# Altium footprint library WR-FPC_0.50mm.PcbLib: 147 footprints (part 9 of 10)
Each footprint in its own frame and in the unit in brackets; x right, y up, seen from the top. Pads: shape width x height; smd on the part's side, far side on the other; paste and mask are expansions set on the pad; w line width, h text height; cw(c..) or ccw(c..) is an arc to the next point about the centre after c.
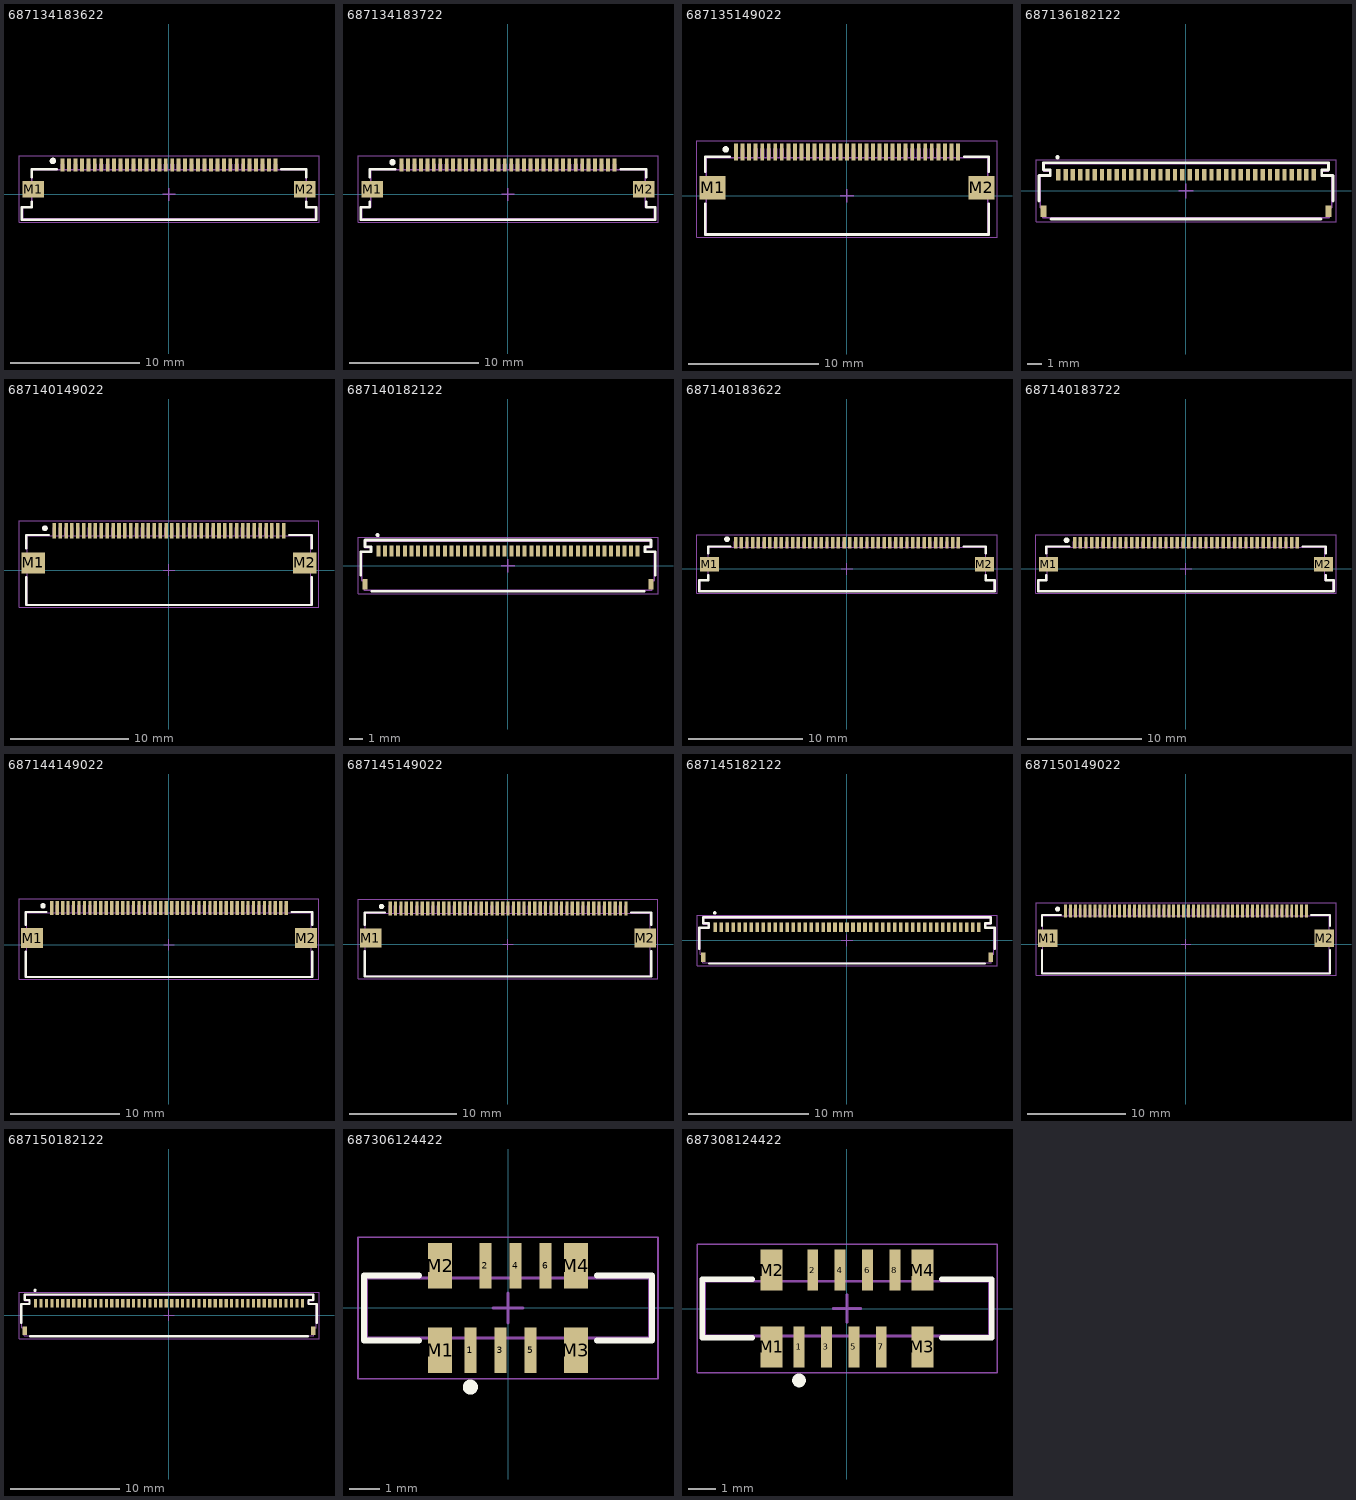
[diagram p8: the footprints below, top view; thin cyan lines are the x and y axes]

## 687134183622 [mm] "ZIF Connectors, Horizontal, Top Contact Low Profile, pitch 0.5mm, 34p"
height 1.3
pads (36):
  rect 0.3x1 smd: 1(-8.25,2.3) 2(-7.75,2.3) 3(-7.25,2.3) 4(-6.75,2.3) 5(-6.25,2.3) 6(-5.75,2.3) 7(-5.25,2.3) 8(-4.75,2.3) 9(-4.25,2.3) 10(-3.75,2.3) 11(-3.25,2.3) 12(-2.75,2.3) 13(-2.25,2.3) 14(-1.75,2.3) 15(-1.25,2.3) 16(-0.75,2.3) 17(-0.25,2.3) 18(0.25,2.3) 19(0.75,2.3) 20(1.25,2.3) 21(1.75,2.3) 22(2.25,2.3) 23(2.75,2.3) 24(3.25,2.3) 25(3.75,2.3) 26(4.25,2.3) 27(4.75,2.3) 28(5.25,2.3) 29(5.75,2.3) 30(6.25,2.3) 31(6.75,2.3) 32(7.25,2.3) 33(7.75,2.3) 34(8.25,2.3)
  rect 1.65x1.3 smd: M1(-10.525,0.4) M2(10.525,0.4)
Top Overlay:
  circle w0.25: c-9,2.6 r0.125
  lines w0.2: -10.65,-0.55 -10.65,-1 -11.425,-1 -11.425,-1.95 11.425,-1.95 11.425,-1 10.65,-1 10.65,-0.55 ; -10.65,1.35 -10.65,1.95 -8.7,1.95 ; 8.7,1.95 10.65,1.95 10.65,1.35
Top Assembly:
  lines w0.1: -8.35,1.9 -8.35,2.35 -8.15,2.35 -8.15,1.9 ; -7.85,1.9 -7.85,2.35 -7.65,2.35 -7.65,1.9 ; -7.35,1.9 -7.35,2.35 -7.15,2.35 -7.15,1.9 ; -6.85,1.9 -6.85,2.35 -6.65,2.35 -6.65,1.9 ; -6.35,1.9 -6.35,2.35 -6.15,2.35 -6.15,1.9 ; -5.85,1.9 -5.85,2.35 -5.65,2.35 -5.65,1.9 ; -5.35,1.9 -5.35,2.35 -5.15,2.35 -5.15,1.9 ; -4.85,1.9 -4.85,2.35 -4.65,2.35 -4.65,1.9 ; -4.35,1.9 -4.35,2.35 -4.15,2.35 -4.15,1.9 ; -3.85,1.9 -3.85,2.35 -3.65,2.35 -3.65,1.9 ; -3.35,1.9 -3.35,2.35 -3.15,2.35 -3.15,1.9 ; -2.85,1.9 -2.85,2.35 -2.65,2.35 -2.65,1.9 ; -2.35,1.9 -2.35,2.35 -2.15,2.35 -2.15,1.9 ; -1.85,1.9 -1.85,2.35 -1.65,2.35 -1.65,1.9 ; -1.35,1.9 -1.35,2.35 -1.15,2.35 -1.15,1.9 ; -0.85,1.9 -0.85,2.35 -0.65,2.35 -0.65,1.9 ; -0.35,1.9 -0.35,2.35 -0.15,2.35 -0.15,1.9 ; 0.15,1.9 0.15,2.35 0.35,2.35 0.35,1.9 ; 0.65,1.9 0.65,2.35 0.85,2.35 0.85,1.9 ; 1.15,1.9 1.15,2.35 1.35,2.35 1.35,1.9 ; 1.65,1.9 1.65,2.35 1.85,2.35 1.85,1.9 ; 2.15,1.9 2.15,2.35 2.35,2.35 2.35,1.9 ; 2.65,1.9 2.65,2.35 2.85,2.35 2.85,1.9 ; 3.15,1.9 3.15,2.35 3.35,2.35 3.35,1.9 ; 3.65,1.9 3.65,2.35 3.85,2.35 3.85,1.9 ; 4.15,1.9 4.15,2.35 4.35,2.35 4.35,1.9 ; 4.65,1.9 4.65,2.35 4.85,2.35 4.85,1.9 ; 5.15,1.9 5.15,2.35 5.35,2.35 5.35,1.9 ; 5.65,1.9 5.65,2.35 5.85,2.35 5.85,1.9 ; 6.15,1.9 6.15,2.35 6.35,2.35 6.35,1.9 ; 6.65,1.9 6.65,2.35 6.85,2.35 6.85,1.9 ; 7.15,1.9 7.15,2.35 7.35,2.35 7.35,1.9 ; 7.65,1.9 7.65,2.35 7.85,2.35 7.85,1.9 ; 8.15,1.9 8.15,2.35 8.35,2.35 8.35,1.9 ; -11.35,-1.9 -11.35,-1 -10.65,-1 -10.65,1.9 10.65,1.9 10.65,-1 11.35,-1 11.35,-1.9 -11.35,-1.9
Top Designator:
  text ".Designator" at -3.647,-0.357 h1
Top 3D Body:
  lines w0.1: -8.35,1.9 -8.35,2.35 -8.15,2.35 -8.15,1.9 ; -7.85,1.9 -7.85,2.35 -7.65,2.35 -7.65,1.9 ; -7.35,1.9 -7.35,2.35 -7.15,2.35 -7.15,1.9 ; -6.85,1.9 -6.85,2.35 -6.65,2.35 -6.65,1.9 ; -6.35,1.9 -6.35,2.35 -6.15,2.35 -6.15,1.9 ; -5.85,1.9 -5.85,2.35 -5.65,2.35 -5.65,1.9 ; -5.35,1.9 -5.35,2.35 -5.15,2.35 -5.15,1.9 ; -4.85,1.9 -4.85,2.35 -4.65,2.35 -4.65,1.9 ; -4.35,1.9 -4.35,2.35 -4.15,2.35 -4.15,1.9 ; -3.85,1.9 -3.85,2.35 -3.65,2.35 -3.65,1.9 ; -3.35,1.9 -3.35,2.35 -3.15,2.35 -3.15,1.9 ; -2.85,1.9 -2.85,2.35 -2.65,2.35 -2.65,1.9 ; -2.35,1.9 -2.35,2.35 -2.15,2.35 -2.15,1.9 ; -1.85,1.9 -1.85,2.35 -1.65,2.35 -1.65,1.9 ; -1.35,1.9 -1.35,2.35 -1.15,2.35 -1.15,1.9 ; -0.85,1.9 -0.85,2.35 -0.65,2.35 -0.65,1.9 ; -0.35,1.9 -0.35,2.35 -0.15,2.35 -0.15,1.9 ; 0.15,1.9 0.15,2.35 0.35,2.35 0.35,1.9 ; 0.65,1.9 0.65,2.35 0.85,2.35 0.85,1.9 ; 1.15,1.9 1.15,2.35 1.35,2.35 1.35,1.9 ; 1.65,1.9 1.65,2.35 1.85,2.35 1.85,1.9 ; 2.15,1.9 2.15,2.35 2.35,2.35 2.35,1.9 ; 2.65,1.9 2.65,2.35 2.85,2.35 2.85,1.9 ; 3.15,1.9 3.15,2.35 3.35,2.35 3.35,1.9 ; 3.65,1.9 3.65,2.35 3.85,2.35 3.85,1.9 ; 4.15,1.9 4.15,2.35 4.35,2.35 4.35,1.9 ; 4.65,1.9 4.65,2.35 4.85,2.35 4.85,1.9 ; 5.15,1.9 5.15,2.35 5.35,2.35 5.35,1.9 ; 5.65,1.9 5.65,2.35 5.85,2.35 5.85,1.9 ; 6.15,1.9 6.15,2.35 6.35,2.35 6.35,1.9 ; 6.65,1.9 6.65,2.35 6.85,2.35 6.85,1.9 ; 7.15,1.9 7.15,2.35 7.35,2.35 7.35,1.9 ; 7.65,1.9 7.65,2.35 7.85,2.35 7.85,1.9 ; 8.15,1.9 8.15,2.35 8.35,2.35 8.35,1.9 ; -11.35,-1.9 11.35,-1.9 11.35,-1 10.65,-1 10.65,1.9 -10.65,1.9 -10.65,-1 -11.35,-1 -11.35,-1.9
Top Courtyard:
  lines w0.05: -11.625,-2.15 -11.625,3 11.625,3 11.625,-2.15 -11.625,-2.15
Top Component Center:
  lines w0.1: -0.5,0 0.5,0 ; 0,-0.5 0,0.5
3D body "687134183622.stp": height 1.28, standoff -0.01, extent -11.35,-1.9 11.35,2.35

## 687134183722 [mm] "ZIF Connectors, Horizontal, Bottom Contact Low Profile, pitch 0.5mm, 34p"
height 1.3
pads (36):
  rect 0.3x1 smd: 1(-8.25,2.3) 2(-7.75,2.3) 3(-7.25,2.3) 4(-6.75,2.3) 5(-6.25,2.3) 6(-5.75,2.3) 7(-5.25,2.3) 8(-4.75,2.3) 9(-4.25,2.3) 10(-3.75,2.3) 11(-3.25,2.3) 12(-2.75,2.3) 13(-2.25,2.3) 14(-1.75,2.3) 15(-1.25,2.3) 16(-0.75,2.3) 17(-0.25,2.3) 18(0.25,2.3) 19(0.75,2.3) 20(1.25,2.3) 21(1.75,2.3) 22(2.25,2.3) 23(2.75,2.3) 24(3.25,2.3) 25(3.75,2.3) 26(4.25,2.3) 27(4.75,2.3) 28(5.25,2.3) 29(5.75,2.3) 30(6.25,2.3) 31(6.75,2.3) 32(7.25,2.3) 33(7.75,2.3) 34(8.25,2.3)
  rect 1.65x1.3 smd: M1(-10.525,0.4) M2(10.525,0.4)
Top Overlay:
  circle w0.25: c-8.95,2.5 r0.125
  lines w0.2: -10.725,-0.55 -10.725,-1 -11.425,-1 -11.425,-1.95 11.425,-1.95 11.425,-1 10.725,-1 10.725,-0.55 ; -10.725,1.35 -10.725,1.95 -8.725,1.95 ; 8.725,1.95 10.725,1.95 10.725,1.35
Top Assembly:
  lines w0.1: -8.35,1.9 -8.35,2.35 -8.15,2.35 -8.15,1.9 ; -7.85,1.9 -7.85,2.35 -7.65,2.35 -7.65,1.9 ; -7.35,1.9 -7.35,2.35 -7.15,2.35 -7.15,1.9 ; -6.85,1.9 -6.85,2.35 -6.65,2.35 -6.65,1.9 ; -6.35,1.9 -6.35,2.35 -6.15,2.35 -6.15,1.9 ; -5.85,1.9 -5.85,2.35 -5.65,2.35 -5.65,1.9 ; -5.35,1.9 -5.35,2.35 -5.15,2.35 -5.15,1.9 ; -4.85,1.9 -4.85,2.35 -4.65,2.35 -4.65,1.9 ; -4.35,1.9 -4.35,2.35 -4.15,2.35 -4.15,1.9 ; -3.85,1.9 -3.85,2.35 -3.65,2.35 -3.65,1.9 ; -3.35,1.9 -3.35,2.35 -3.15,2.35 -3.15,1.9 ; -2.85,1.9 -2.85,2.35 -2.65,2.35 -2.65,1.9 ; -2.35,1.9 -2.35,2.35 -2.15,2.35 -2.15,1.9 ; -1.85,1.9 -1.85,2.35 -1.65,2.35 -1.65,1.9 ; -1.35,1.9 -1.35,2.35 -1.15,2.35 -1.15,1.9 ; -0.85,1.9 -0.85,2.35 -0.65,2.35 -0.65,1.9 ; -0.35,1.9 -0.35,2.35 -0.15,2.35 -0.15,1.9 ; 0.15,1.9 0.15,2.35 0.35,2.35 0.35,1.9 ; 0.65,1.9 0.65,2.35 0.85,2.35 0.85,1.9 ; 1.15,1.9 1.15,2.35 1.35,2.35 1.35,1.9 ; 1.65,1.9 1.65,2.35 1.85,2.35 1.85,1.9 ; 2.15,1.9 2.15,2.35 2.35,2.35 2.35,1.9 ; 2.65,1.9 2.65,2.35 2.85,2.35 2.85,1.9 ; 3.15,1.9 3.15,2.35 3.35,2.35 3.35,1.9 ; 3.65,1.9 3.65,2.35 3.85,2.35 3.85,1.9 ; 4.15,1.9 4.15,2.35 4.35,2.35 4.35,1.9 ; 4.65,1.9 4.65,2.35 4.85,2.35 4.85,1.9 ; 5.15,1.9 5.15,2.35 5.35,2.35 5.35,1.9 ; 5.65,1.9 5.65,2.35 5.85,2.35 5.85,1.9 ; 6.15,1.9 6.15,2.35 6.35,2.35 6.35,1.9 ; 6.65,1.9 6.65,2.35 6.85,2.35 6.85,1.9 ; 7.15,1.9 7.15,2.35 7.35,2.35 7.35,1.9 ; 7.65,1.9 7.65,2.35 7.85,2.35 7.85,1.9 ; 8.15,1.9 8.15,2.35 8.35,2.35 8.35,1.9 ; -11.35,-1.9 11.35,-1.9 11.35,-1 10.65,-1 10.65,1.9 -10.65,1.9 -10.65,-1 -11.35,-1 -11.35,-1.9
Top Designator:
  text ".Designator" at -3.647,-0.357 h1
Top 3D Body:
  lines w0.1: -8.35,1.9 -8.35,2.35 -8.15,2.35 -8.15,1.9 ; -7.85,1.9 -7.85,2.35 -7.65,2.35 -7.65,1.9 ; -7.35,1.9 -7.35,2.35 -7.15,2.35 -7.15,1.9 ; -6.85,1.9 -6.85,2.35 -6.65,2.35 -6.65,1.9 ; -6.35,1.9 -6.35,2.35 -6.15,2.35 -6.15,1.9 ; -5.85,1.9 -5.85,2.35 -5.65,2.35 -5.65,1.9 ; -5.35,1.9 -5.35,2.35 -5.15,2.35 -5.15,1.9 ; -4.85,1.9 -4.85,2.35 -4.65,2.35 -4.65,1.9 ; -4.35,1.9 -4.35,2.35 -4.15,2.35 -4.15,1.9 ; -3.85,1.9 -3.85,2.35 -3.65,2.35 -3.65,1.9 ; -3.35,1.9 -3.35,2.35 -3.15,2.35 -3.15,1.9 ; -2.85,1.9 -2.85,2.35 -2.65,2.35 -2.65,1.9 ; -2.35,1.9 -2.35,2.35 -2.15,2.35 -2.15,1.9 ; -1.85,1.9 -1.85,2.35 -1.65,2.35 -1.65,1.9 ; -1.35,1.9 -1.35,2.35 -1.15,2.35 -1.15,1.9 ; -0.85,1.9 -0.85,2.35 -0.65,2.35 -0.65,1.9 ; -0.35,1.9 -0.35,2.35 -0.15,2.35 -0.15,1.9 ; 0.15,1.9 0.15,2.35 0.35,2.35 0.35,1.9 ; 0.65,1.9 0.65,2.35 0.85,2.35 0.85,1.9 ; 1.15,1.9 1.15,2.35 1.35,2.35 1.35,1.9 ; 1.65,1.9 1.65,2.35 1.85,2.35 1.85,1.9 ; 2.15,1.9 2.15,2.35 2.35,2.35 2.35,1.9 ; 2.65,1.9 2.65,2.35 2.85,2.35 2.85,1.9 ; 3.15,1.9 3.15,2.35 3.35,2.35 3.35,1.9 ; 3.65,1.9 3.65,2.35 3.85,2.35 3.85,1.9 ; 4.15,1.9 4.15,2.35 4.35,2.35 4.35,1.9 ; 4.65,1.9 4.65,2.35 4.85,2.35 4.85,1.9 ; 5.15,1.9 5.15,2.35 5.35,2.35 5.35,1.9 ; 5.65,1.9 5.65,2.35 5.85,2.35 5.85,1.9 ; 6.15,1.9 6.15,2.35 6.35,2.35 6.35,1.9 ; 6.65,1.9 6.65,2.35 6.85,2.35 6.85,1.9 ; 7.15,1.9 7.15,2.35 7.35,2.35 7.35,1.9 ; 7.65,1.9 7.65,2.35 7.85,2.35 7.85,1.9 ; 8.15,1.9 8.15,2.35 8.35,2.35 8.35,1.9 ; -11.35,-1.9 -11.35,-1 -10.65,-1 -10.65,1.9 10.65,1.9 10.65,-1 11.35,-1 11.35,-1.9 -11.35,-1.9
Top Courtyard:
  lines w0.05: -11.625,-2.15 11.625,-2.15 11.625,3 -11.625,3 -11.625,-2.15
Top Component Center:
  lines w0.1: -0.5,0 0.5,0 ; 0,-0.5 0,0.5
3D body "687134183722.stp": height 1.28, standoff -0.01, extent -11.35,-1.9 11.35,2.35

## 687135149022 [mm] "0.50mm SMT ZIF Horizontal Hinge Type Bottom Contact, 35p"
height 2.3
pads (37):
  rect 0.3x1.3 smd: 1(-8.5,3.35) 2(-8,3.35) 3(-7.5,3.35) 4(-7,3.35) 5(-6.5,3.35) 6(-6,3.35) 7(-5.5,3.35) 8(-5,3.35) 9(-4.5,3.35) 10(-4,3.35) 11(-3.5,3.35) 12(-3,3.35) 13(-2.5,3.35) 14(-2,3.35) 15(-1.5,3.35) 16(-1,3.35) 17(-0.5,3.35) 18(0,3.35) 19(0.5,3.35) 20(1,3.35) 21(1.5,3.35) 22(2,3.35) 23(2.5,3.35) 24(3,3.35) 25(3.5,3.35) 26(4,3.35) 27(4.5,3.35) 28(5,3.35) 29(5.5,3.35) 30(6,3.35) 31(6.5,3.35) 32(7,3.35) 33(7.5,3.35) 34(8,3.35) 35(8.5,3.35)
  rect 2x1.8 smd: M1(-10.3,0.6) M2(10.3,0.6)
Top Overlay:
  circle w0.25: c-9.3,3.55 r0.125
  lines w0.2: -10.875,-0.625 -10.875,-2.975 10.875,-2.975 10.875,-0.625 ; -10.875,1.825 -10.875,2.975 -8.975,2.975 ; 8.975,2.975 10.875,2.975 10.875,1.825
Top Assembly:
  lines w0.1: -8.6,2.9 -8.6,3.6 -8.4,3.6 -8.4,2.9 ; -8.1,2.9 -8.1,3.6 -7.9,3.6 -7.9,2.9 ; -7.6,2.9 -7.6,3.6 -7.4,3.6 -7.4,2.9 ; -7.1,2.9 -7.1,3.6 -6.9,3.6 -6.9,2.9 ; -6.6,2.9 -6.6,3.6 -6.4,3.6 -6.4,2.9 ; -6.1,2.9 -6.1,3.6 -5.9,3.6 -5.9,2.9 ; -5.6,2.9 -5.6,3.6 -5.4,3.6 -5.4,2.9 ; -5.1,2.9 -5.1,3.6 -4.9,3.6 -4.9,2.9 ; -4.6,2.9 -4.6,3.6 -4.4,3.6 -4.4,2.9 ; -4.1,2.9 -4.1,3.6 -3.9,3.6 -3.9,2.9 ; -3.6,2.9 -3.6,3.6 -3.4,3.6 -3.4,2.9 ; -3.1,2.9 -3.1,3.6 -2.9,3.6 -2.9,2.9 ; -2.6,2.9 -2.6,3.6 -2.4,3.6 -2.4,2.9 ; -2.1,2.9 -2.1,3.6 -1.9,3.6 -1.9,2.9 ; -1.6,2.9 -1.6,3.6 -1.4,3.6 -1.4,2.9 ; -1.1,2.9 -1.1,3.6 -0.9,3.6 -0.9,2.9 ; -0.6,2.9 -0.6,3.6 -0.4,3.6 -0.4,2.9 ; -0.1,2.9 -0.1,3.6 0.1,3.6 0.1,2.9 ; 0.4,2.9 0.4,3.6 0.6,3.6 0.6,2.9 ; 0.9,2.9 0.9,3.6 1.1,3.6 1.1,2.9 ; 1.4,2.9 1.4,3.6 1.6,3.6 1.6,2.9 ; 1.9,2.9 1.9,3.6 2.1,3.6 2.1,2.9 ; 2.4,2.9 2.4,3.6 2.6,3.6 2.6,2.9 ; 2.9,2.9 2.9,3.6 3.1,3.6 3.1,2.9 ; 3.4,2.9 3.4,3.6 3.6,3.6 3.6,2.9 ; 3.9,2.9 3.9,3.6 4.1,3.6 4.1,2.9 ; 4.4,2.9 4.4,3.6 4.6,3.6 4.6,2.9 ; 4.9,2.9 4.9,3.6 5.1,3.6 5.1,2.9 ; 5.4,2.9 5.4,3.6 5.6,3.6 5.6,2.9 ; 5.9,2.9 5.9,3.6 6.1,3.6 6.1,2.9 ; 6.4,2.9 6.4,3.6 6.6,3.6 6.6,2.9 ; 6.9,2.9 6.9,3.6 7.1,3.6 7.1,2.9 ; 7.4,2.9 7.4,3.6 7.6,3.6 7.6,2.9 ; 7.9,2.9 7.9,3.6 8.1,3.6 8.1,2.9 ; 8.4,2.9 8.4,3.6 8.6,3.6 8.6,2.9 ; -10.8,-2.9 -10.8,2.9 10.8,2.9 10.8,-2.9 -10.8,-2.9
Top Designator:
  text ".Designator" at -3.647,-0.357 h1
Top 3D Body:
  lines w0.1: -8.6,2.9 -8.6,3.6 -8.4,3.6 -8.4,2.9 ; -8.1,2.9 -8.1,3.6 -7.9,3.6 -7.9,2.9 ; -7.6,2.9 -7.6,3.6 -7.4,3.6 -7.4,2.9 ; -7.1,2.9 -7.1,3.6 -6.9,3.6 -6.9,2.9 ; -6.6,2.9 -6.6,3.6 -6.4,3.6 -6.4,2.9 ; -6.1,2.9 -6.1,3.6 -5.9,3.6 -5.9,2.9 ; -5.6,2.9 -5.6,3.6 -5.4,3.6 -5.4,2.9 ; -5.1,2.9 -5.1,3.6 -4.9,3.6 -4.9,2.9 ; -4.6,2.9 -4.6,3.6 -4.4,3.6 -4.4,2.9 ; -4.1,2.9 -4.1,3.6 -3.9,3.6 -3.9,2.9 ; -3.6,2.9 -3.6,3.6 -3.4,3.6 -3.4,2.9 ; -3.1,2.9 -3.1,3.6 -2.9,3.6 -2.9,2.9 ; -2.6,2.9 -2.6,3.6 -2.4,3.6 -2.4,2.9 ; -2.1,2.9 -2.1,3.6 -1.9,3.6 -1.9,2.9 ; -1.6,2.9 -1.6,3.6 -1.4,3.6 -1.4,2.9 ; -1.1,2.9 -1.1,3.6 -0.9,3.6 -0.9,2.9 ; -0.6,2.9 -0.6,3.6 -0.4,3.6 -0.4,2.9 ; -0.1,2.9 -0.1,3.6 0.1,3.6 0.1,2.9 ; 0.4,2.9 0.4,3.6 0.6,3.6 0.6,2.9 ; 0.9,2.9 0.9,3.6 1.1,3.6 1.1,2.9 ; 1.4,2.9 1.4,3.6 1.6,3.6 1.6,2.9 ; 1.9,2.9 1.9,3.6 2.1,3.6 2.1,2.9 ; 2.4,2.9 2.4,3.6 2.6,3.6 2.6,2.9 ; 2.9,2.9 2.9,3.6 3.1,3.6 3.1,2.9 ; 3.4,2.9 3.4,3.6 3.6,3.6 3.6,2.9 ; 3.9,2.9 3.9,3.6 4.1,3.6 4.1,2.9 ; 4.4,2.9 4.4,3.6 4.6,3.6 4.6,2.9 ; 4.9,2.9 4.9,3.6 5.1,3.6 5.1,2.9 ; 5.4,2.9 5.4,3.6 5.6,3.6 5.6,2.9 ; 5.9,2.9 5.9,3.6 6.1,3.6 6.1,2.9 ; 6.4,2.9 6.4,3.6 6.6,3.6 6.6,2.9 ; 6.9,2.9 6.9,3.6 7.1,3.6 7.1,2.9 ; 7.4,2.9 7.4,3.6 7.6,3.6 7.6,2.9 ; 7.9,2.9 7.9,3.6 8.1,3.6 8.1,2.9 ; 8.4,2.9 8.4,3.6 8.6,3.6 8.6,2.9 ; -10.8,-2.9 10.8,-2.9 10.8,2.9 -10.8,2.9 -10.8,-2.9
Top Courtyard:
  lines w0.05: -11.5,-3.175 -11.5,4.2 11.5,4.2 11.5,-3.175 -11.5,-3.175
Top Component Center:
  lines w0.1: -0.5,0 0.5,0 ; 0,-0.5 0,0.5
3D body "687135149022.stp": height 2.25, standoff 0, extent -10.8,-2.9 10.8,3.6

## 687136182122 [mm] "ZIF Connectors, Horizontal, Dual Contact Back Locking, pitch 0.5mm, 36p"
height 1.06
pads (38):
  rect 0.3x0.8 smd: 1(-8.75,1.1) 2(-8.25,1.1) 3(-7.75,1.1) 4(-7.25,1.1) 5(-6.75,1.1) 6(-6.25,1.1) 7(-5.75,1.1) 8(-5.25,1.1) 9(-4.75,1.1) 10(-4.25,1.1) 11(-3.75,1.1) 12(-3.25,1.1) 13(-2.75,1.1) 14(-2.25,1.1) 15(-1.75,1.1) 16(-1.25,1.1) 17(-0.75,1.1) 18(-0.25,1.1) 19(0.25,1.1) 20(0.75,1.1) 21(1.25,1.1) 22(1.75,1.1) 23(2.25,1.1) 24(2.75,1.1) 25(3.25,1.1) 26(3.75,1.1) 27(4.25,1.1) 28(4.75,1.1) 29(5.25,1.1) 30(5.75,1.1) 31(6.25,1.1) 32(6.75,1.1) 33(7.25,1.1) 34(7.75,1.1) 35(8.25,1.1) 36(8.75,1.1)
  rect 0.4x0.8 smd: M1(-9.75,-1.4) M2(9.75,-1.4)
Top Overlay:
  circle w0.15: c-8.8,2.3 r0.075
  lines w0.2: -10.075,-0.7 -10.075,1.05 -9.3,1.05 -9.3,1.425 -9.75,1.425 -9.75,1.925 9.75,1.925 9.75,1.425 9.3,1.425 9.3,1.05 10.075,1.05 10.075,-0.7 ; -9.25,-1.925 9.25,-1.925
Top Assembly:
  lines w0.1: -10,-1.15 -10,1.05 -9.3,1.05 -9.3,1.35 -9.75,1.35 -9.75,1.85 9.75,1.85 9.75,1.35 9.3,1.35 9.3,1.05 10,1.05 10,-1.15 9.8,-1.15 9.8,-1.85 -9.8,-1.85 -9.8,-1.15 -10,-1.15
Top Designator:
  text ".Designator" at -3.647,-0.357 h1
Top 3D Body:
  lines w0.1: -10,-1.15 -9.8,-1.15 -9.8,-1.85 9.8,-1.85 9.8,-1.15 10,-1.15 10,1.05 9.3,1.05 9.3,1.35 9.75,1.35 9.75,1.85 -9.75,1.85 -9.75,1.35 -9.3,1.35 -9.3,1.05 -10,1.05 -10,-1.15
Top Courtyard:
  lines w0.05: -10.275,-2.125 -10.275,2.125 10.275,2.125 10.275,-2.125 -10.275,-2.125
Top Component Center:
  lines w0.1: -0.5,0 0.5,0 ; 0,-0.5 0,0.5
3D body "687136182122.stp": height 0.98, standoff -0.01, extent -10,-1.85 10,1.85

## 687140149022 [mm] "0.50mm SMT ZIF Horizontal Hinge Type Bottom Contact, 40p"
height 2.3
pads (42):
  rect 0.3x1.3 smd: 1(-9.75,3.35) 2(-9.25,3.35) 3(-8.75,3.35) 4(-8.25,3.35) 5(-7.75,3.35) 6(-7.25,3.35) 7(-6.75,3.35) 8(-6.25,3.35) 9(-5.75,3.35) 10(-5.25,3.35) 11(-4.75,3.35) 12(-4.25,3.35) 13(-3.75,3.35) 14(-3.25,3.35) 15(-2.75,3.35) 16(-2.25,3.35) 17(-1.75,3.35) 18(-1.25,3.35) 19(-0.75,3.35) 20(-0.25,3.35) 21(0.25,3.35) 22(0.75,3.35) 23(1.25,3.35) 24(1.75,3.35) 25(2.25,3.35) 26(2.75,3.35) 27(3.25,3.35) 28(3.75,3.35) 29(4.25,3.35) 30(4.75,3.35) 31(5.25,3.35) 32(5.75,3.35) 33(6.25,3.35) 34(6.75,3.35) 35(7.25,3.35) 36(7.75,3.35) 37(8.25,3.35) 38(8.75,3.35) 39(9.25,3.35) 40(9.75,3.35)
  rect 2x1.8 smd: M1(-11.55,0.6) M2(11.55,0.6)
Top Overlay:
  circle w0.25: c-10.55,3.55 r0.125
  lines w0.2: -12.125,-0.625 -12.125,-2.975 12.125,-2.975 12.125,-0.625 ; -12.125,1.825 -12.125,2.975 -10.225,2.975 ; 10.225,2.975 12.125,2.975 12.125,1.825
Top Assembly:
  lines w0.1: -9.85,2.9 -9.85,3.6 -9.65,3.6 -9.65,2.9 ; -9.35,2.9 -9.35,3.6 -9.15,3.6 -9.15,2.9 ; -8.85,2.9 -8.85,3.6 -8.65,3.6 -8.65,2.9 ; -8.35,2.9 -8.35,3.6 -8.15,3.6 -8.15,2.9 ; -7.85,2.9 -7.85,3.6 -7.65,3.6 -7.65,2.9 ; -7.35,2.9 -7.35,3.6 -7.15,3.6 -7.15,2.9 ; -6.85,2.9 -6.85,3.6 -6.65,3.6 -6.65,2.9 ; -6.35,2.9 -6.35,3.6 -6.15,3.6 -6.15,2.9 ; -5.85,2.9 -5.85,3.6 -5.65,3.6 -5.65,2.9 ; -5.35,2.9 -5.35,3.6 -5.15,3.6 -5.15,2.9 ; -4.85,2.9 -4.85,3.6 -4.65,3.6 -4.65,2.9 ; -4.35,2.9 -4.35,3.6 -4.15,3.6 -4.15,2.9 ; -3.85,2.9 -3.85,3.6 -3.65,3.6 -3.65,2.9 ; -3.35,2.9 -3.35,3.6 -3.15,3.6 -3.15,2.9 ; -2.85,2.9 -2.85,3.6 -2.65,3.6 -2.65,2.9 ; -2.35,2.9 -2.35,3.6 -2.15,3.6 -2.15,2.9 ; -1.85,2.9 -1.85,3.6 -1.65,3.6 -1.65,2.9 ; -1.35,2.9 -1.35,3.6 -1.15,3.6 -1.15,2.9 ; -0.85,2.9 -0.85,3.6 -0.65,3.6 -0.65,2.9 ; -0.35,2.9 -0.35,3.6 -0.15,3.6 -0.15,2.9 ; 0.15,2.9 0.15,3.6 0.35,3.6 0.35,2.9 ; 0.65,2.9 0.65,3.6 0.85,3.6 0.85,2.9 ; 1.15,2.9 1.15,3.6 1.35,3.6 1.35,2.9 ; 1.65,2.9 1.65,3.6 1.85,3.6 1.85,2.9 ; 2.15,2.9 2.15,3.6 2.35,3.6 2.35,2.9 ; 2.65,2.9 2.65,3.6 2.85,3.6 2.85,2.9 ; 3.15,2.9 3.15,3.6 3.35,3.6 3.35,2.9 ; 3.65,2.9 3.65,3.6 3.85,3.6 3.85,2.9 ; 4.15,2.9 4.15,3.6 4.35,3.6 4.35,2.9 ; 4.65,2.9 4.65,3.6 4.85,3.6 4.85,2.9 ; 5.15,2.9 5.15,3.6 5.35,3.6 5.35,2.9 ; 5.65,2.9 5.65,3.6 5.85,3.6 5.85,2.9 ; 6.15,2.9 6.15,3.6 6.35,3.6 6.35,2.9 ; 6.65,2.9 6.65,3.6 6.85,3.6 6.85,2.9 ; 7.15,2.9 7.15,3.6 7.35,3.6 7.35,2.9 ; 7.65,2.9 7.65,3.6 7.85,3.6 7.85,2.9 ; 8.15,2.9 8.15,3.6 8.35,3.6 8.35,2.9 ; 8.65,2.9 8.65,3.6 8.85,3.6 8.85,2.9 ; 9.15,2.9 9.15,3.6 9.35,3.6 9.35,2.9 ; 9.65,2.9 9.65,3.6 9.85,3.6 9.85,2.9 ; -12.05,-2.9 12.05,-2.9 12.05,2.9 -12.05,2.9 -12.05,-2.9
Top Designator:
  text ".Designator" at -3.647,-0.357 h1
Top 3D Body:
  lines w0.1: -9.85,2.9 -9.85,3.6 -9.65,3.6 -9.65,2.9 ; -9.35,2.9 -9.35,3.6 -9.15,3.6 -9.15,2.9 ; -8.85,2.9 -8.85,3.6 -8.65,3.6 -8.65,2.9 ; -8.35,2.9 -8.35,3.6 -8.15,3.6 -8.15,2.9 ; -7.85,2.9 -7.85,3.6 -7.65,3.6 -7.65,2.9 ; -7.35,2.9 -7.35,3.6 -7.15,3.6 -7.15,2.9 ; -6.85,2.9 -6.85,3.6 -6.65,3.6 -6.65,2.9 ; -6.35,2.9 -6.35,3.6 -6.15,3.6 -6.15,2.9 ; -5.85,2.9 -5.85,3.6 -5.65,3.6 -5.65,2.9 ; -5.35,2.9 -5.35,3.6 -5.15,3.6 -5.15,2.9 ; -4.85,2.9 -4.85,3.6 -4.65,3.6 -4.65,2.9 ; -4.35,2.9 -4.35,3.6 -4.15,3.6 -4.15,2.9 ; -3.85,2.9 -3.85,3.6 -3.65,3.6 -3.65,2.9 ; -3.35,2.9 -3.35,3.6 -3.15,3.6 -3.15,2.9 ; -2.85,2.9 -2.85,3.6 -2.65,3.6 -2.65,2.9 ; -2.35,2.9 -2.35,3.6 -2.15,3.6 -2.15,2.9 ; -1.85,2.9 -1.85,3.6 -1.65,3.6 -1.65,2.9 ; -1.35,2.9 -1.35,3.6 -1.15,3.6 -1.15,2.9 ; -0.85,2.9 -0.85,3.6 -0.65,3.6 -0.65,2.9 ; -0.35,2.9 -0.35,3.6 -0.15,3.6 -0.15,2.9 ; 0.15,2.9 0.15,3.6 0.35,3.6 0.35,2.9 ; 0.65,2.9 0.65,3.6 0.85,3.6 0.85,2.9 ; 1.15,2.9 1.15,3.6 1.35,3.6 1.35,2.9 ; 1.65,2.9 1.65,3.6 1.85,3.6 1.85,2.9 ; 2.15,2.9 2.15,3.6 2.35,3.6 2.35,2.9 ; 2.65,2.9 2.65,3.6 2.85,3.6 2.85,2.9 ; 3.15,2.9 3.15,3.6 3.35,3.6 3.35,2.9 ; 3.65,2.9 3.65,3.6 3.85,3.6 3.85,2.9 ; 4.15,2.9 4.15,3.6 4.35,3.6 4.35,2.9 ; 4.65,2.9 4.65,3.6 4.85,3.6 4.85,2.9 ; 5.15,2.9 5.15,3.6 5.35,3.6 5.35,2.9 ; 5.65,2.9 5.65,3.6 5.85,3.6 5.85,2.9 ; 6.15,2.9 6.15,3.6 6.35,3.6 6.35,2.9 ; 6.65,2.9 6.65,3.6 6.85,3.6 6.85,2.9 ; 7.15,2.9 7.15,3.6 7.35,3.6 7.35,2.9 ; 7.65,2.9 7.65,3.6 7.85,3.6 7.85,2.9 ; 8.15,2.9 8.15,3.6 8.35,3.6 8.35,2.9 ; 8.65,2.9 8.65,3.6 8.85,3.6 8.85,2.9 ; 9.15,2.9 9.15,3.6 9.35,3.6 9.35,2.9 ; 9.65,2.9 9.65,3.6 9.85,3.6 9.85,2.9 ; -12.05,-2.9 -12.05,2.9 12.05,2.9 12.05,-2.9 -12.05,-2.9
Top Courtyard:
  lines w0.05: -12.75,-3.175 12.75,-3.175 12.75,4.2 -12.75,4.2 -12.75,-3.175
Top Component Center:
  lines w0.1: -0.5,0 0.5,0 ; 0,-0.5 0,0.5
3D body "687140149022.stp": height 2.25, standoff 0, extent -12.05,-2.9 12.05,3.6

## 687140182122 [mm] "ZIF Connectors, Horizontal, Dual Contact Back Locking, pitch 0.5mm, 40p"
height 1.06
pads (42):
  rect 0.3x0.8 smd: 1(-9.75,1.1) 2(-9.25,1.1) 3(-8.75,1.1) 4(-8.25,1.1) 5(-7.75,1.1) 6(-7.25,1.1) 7(-6.75,1.1) 8(-6.25,1.1) 9(-5.75,1.1) 10(-5.25,1.1) 11(-4.75,1.1) 12(-4.25,1.1) 13(-3.75,1.1) 14(-3.25,1.1) 15(-2.75,1.1) 16(-2.25,1.1) 17(-1.75,1.1) 18(-1.25,1.1) 19(-0.75,1.1) 20(-0.25,1.1) 21(0.25,1.1) 22(0.75,1.1) 23(1.25,1.1) 24(1.75,1.1) 25(2.25,1.1) 26(2.75,1.1) 27(3.25,1.1) 28(3.75,1.1) 29(4.25,1.1) 30(4.75,1.1) 31(5.25,1.1) 32(5.75,1.1) 33(6.25,1.1) 34(6.75,1.1) 35(7.25,1.1) 36(7.75,1.1) 37(8.25,1.1) 38(8.75,1.1) 39(9.25,1.1) 40(9.75,1.1)
  rect 0.4x0.8 smd: M1(-10.75,-1.4) M2(10.75,-1.4)
Top Overlay:
  circle w0.15: c-9.8,2.3 r0.075
  lines w0.2: -11.075,-0.7 -11.075,1.05 -10.3,1.05 -10.3,1.425 -10.75,1.425 -10.75,1.925 10.75,1.925 10.75,1.425 10.3,1.425 10.3,1.05 11.075,1.05 11.075,-0.7 ; -10.25,-1.925 10.25,-1.925
Top Assembly:
  lines w0.1: -11,-1.15 -10.8,-1.15 -10.8,-1.85 10.8,-1.85 10.8,-1.15 11,-1.15 11,1.05 10.3,1.05 10.3,1.35 10.75,1.35 10.75,1.85 -10.75,1.85 -10.75,1.35 -10.3,1.35 -10.3,1.05 -11,1.05 -11,-1.15
Top Designator:
  text ".Designator" at -3.647,-0.357 h1
Top 3D Body:
  lines w0.1: -11,-1.15 -11,1.05 -10.3,1.05 -10.3,1.35 -10.75,1.35 -10.75,1.85 10.75,1.85 10.75,1.35 10.3,1.35 10.3,1.05 11,1.05 11,-1.15 10.8,-1.15 10.8,-1.85 -10.8,-1.85 -10.8,-1.15 -11,-1.15
Top Courtyard:
  lines w0.05: -11.275,-2.125 11.275,-2.125 11.275,2.125 -11.275,2.125 -11.275,-2.125
Top Component Center:
  lines w0.1: -0.5,0 0.5,0 ; 0,-0.5 0,0.5
3D body "687140182122.stp": height 0.98, standoff -0.01, extent -11,-1.85 11,1.85

## 687140183622 [mm] "ZIF Connectors, Horizontal, Top Contact Low Profile, pitch 0.5mm, 40p"
height 1.3
pads (42):
  rect 0.3x1 smd: 1(-9.75,2.3) 2(-9.25,2.3) 3(-8.75,2.3) 4(-8.25,2.3) 5(-7.75,2.3) 6(-7.25,2.3) 7(-6.75,2.3) 8(-6.25,2.3) 9(-5.75,2.3) 10(-5.25,2.3) 11(-4.75,2.3) 12(-4.25,2.3) 13(-3.75,2.3) 14(-3.25,2.3) 15(-2.75,2.3) 16(-2.25,2.3) 17(-1.75,2.3) 18(-1.25,2.3) 19(-0.75,2.3) 20(-0.25,2.3) 21(0.25,2.3) 22(0.75,2.3) 23(1.25,2.3) 24(1.75,2.3) 25(2.25,2.3) 26(2.75,2.3) 27(3.25,2.3) 28(3.75,2.3) 29(4.25,2.3) 30(4.75,2.3) 31(5.25,2.3) 32(5.75,2.3) 33(6.25,2.3) 34(6.75,2.3) 35(7.25,2.3) 36(7.75,2.3) 37(8.25,2.3) 38(8.75,2.3) 39(9.25,2.3) 40(9.75,2.3)
  rect 1.65x1.3 smd: M1(-12.025,0.4) M2(12.025,0.4)
Top Overlay:
  circle w0.25: c-10.5,2.6 r0.125
  lines w0.2: -12.15,-0.55 -12.15,-1 -12.925,-1 -12.925,-1.95 12.925,-1.95 12.925,-1 12.15,-1 12.15,-0.55 ; -12.15,1.35 -12.15,1.95 -10.2,1.95 ; 10.2,1.95 12.15,1.95 12.15,1.35
Top Assembly:
  lines w0.1: -9.85,1.9 -9.85,2.35 -9.65,2.35 -9.65,1.9 ; -9.35,1.9 -9.35,2.35 -9.15,2.35 -9.15,1.9 ; -8.85,1.9 -8.85,2.35 -8.65,2.35 -8.65,1.9 ; -8.35,1.9 -8.35,2.35 -8.15,2.35 -8.15,1.9 ; -7.85,1.9 -7.85,2.35 -7.65,2.35 -7.65,1.9 ; -7.35,1.9 -7.35,2.35 -7.15,2.35 -7.15,1.9 ; -6.85,1.9 -6.85,2.35 -6.65,2.35 -6.65,1.9 ; -6.35,1.9 -6.35,2.35 -6.15,2.35 -6.15,1.9 ; -5.85,1.9 -5.85,2.35 -5.65,2.35 -5.65,1.9 ; -5.35,1.9 -5.35,2.35 -5.15,2.35 -5.15,1.9 ; -4.85,1.9 -4.85,2.35 -4.65,2.35 -4.65,1.9 ; -4.35,1.9 -4.35,2.35 -4.15,2.35 -4.15,1.9 ; -3.85,1.9 -3.85,2.35 -3.65,2.35 -3.65,1.9 ; -3.35,1.9 -3.35,2.35 -3.15,2.35 -3.15,1.9 ; -2.85,1.9 -2.85,2.35 -2.65,2.35 -2.65,1.9 ; -2.35,1.9 -2.35,2.35 -2.15,2.35 -2.15,1.9 ; -1.85,1.9 -1.85,2.35 -1.65,2.35 -1.65,1.9 ; -1.35,1.9 -1.35,2.35 -1.15,2.35 -1.15,1.9 ; -0.85,1.9 -0.85,2.35 -0.65,2.35 -0.65,1.9 ; -0.35,1.9 -0.35,2.35 -0.15,2.35 -0.15,1.9 ; 0.15,1.9 0.15,2.35 0.35,2.35 0.35,1.9 ; 0.65,1.9 0.65,2.35 0.85,2.35 0.85,1.9 ; 1.15,1.9 1.15,2.35 1.35,2.35 1.35,1.9 ; 1.65,1.9 1.65,2.35 1.85,2.35 1.85,1.9 ; 2.15,1.9 2.15,2.35 2.35,2.35 2.35,1.9 ; 2.65,1.9 2.65,2.35 2.85,2.35 2.85,1.9 ; 3.15,1.9 3.15,2.35 3.35,2.35 3.35,1.9 ; 3.65,1.9 3.65,2.35 3.85,2.35 3.85,1.9 ; 4.15,1.9 4.15,2.35 4.35,2.35 4.35,1.9 ; 4.65,1.9 4.65,2.35 4.85,2.35 4.85,1.9 ; 5.15,1.9 5.15,2.35 5.35,2.35 5.35,1.9 ; 5.65,1.9 5.65,2.35 5.85,2.35 5.85,1.9 ; 6.15,1.9 6.15,2.35 6.35,2.35 6.35,1.9 ; 6.65,1.9 6.65,2.35 6.85,2.35 6.85,1.9 ; 7.15,1.9 7.15,2.35 7.35,2.35 7.35,1.9 ; 7.65,1.9 7.65,2.35 7.85,2.35 7.85,1.9 ; 8.15,1.9 8.15,2.35 8.35,2.35 8.35,1.9 ; 8.65,1.9 8.65,2.35 8.85,2.35 8.85,1.9 ; 9.15,1.9 9.15,2.35 9.35,2.35 9.35,1.9 ; 9.65,1.9 9.65,2.35 9.85,2.35 9.85,1.9 ; -12.85,-1.9 -12.85,-1 -12.15,-1 -12.15,1.9 12.15,1.9 12.15,-1 12.85,-1 12.85,-1.9 -12.85,-1.9
Top Designator:
  text ".Designator" at -3.647,-0.357 h1
Top 3D Body:
  lines w0.1: -9.85,1.9 -9.85,2.35 -9.65,2.35 -9.65,1.9 ; -9.35,1.9 -9.35,2.35 -9.15,2.35 -9.15,1.9 ; -8.85,1.9 -8.85,2.35 -8.65,2.35 -8.65,1.9 ; -8.35,1.9 -8.35,2.35 -8.15,2.35 -8.15,1.9 ; -7.85,1.9 -7.85,2.35 -7.65,2.35 -7.65,1.9 ; -7.35,1.9 -7.35,2.35 -7.15,2.35 -7.15,1.9 ; -6.85,1.9 -6.85,2.35 -6.65,2.35 -6.65,1.9 ; -6.35,1.9 -6.35,2.35 -6.15,2.35 -6.15,1.9 ; -5.85,1.9 -5.85,2.35 -5.65,2.35 -5.65,1.9 ; -5.35,1.9 -5.35,2.35 -5.15,2.35 -5.15,1.9 ; -4.85,1.9 -4.85,2.35 -4.65,2.35 -4.65,1.9 ; -4.35,1.9 -4.35,2.35 -4.15,2.35 -4.15,1.9 ; -3.85,1.9 -3.85,2.35 -3.65,2.35 -3.65,1.9 ; -3.35,1.9 -3.35,2.35 -3.15,2.35 -3.15,1.9 ; -2.85,1.9 -2.85,2.35 -2.65,2.35 -2.65,1.9 ; -2.35,1.9 -2.35,2.35 -2.15,2.35 -2.15,1.9 ; -1.85,1.9 -1.85,2.35 -1.65,2.35 -1.65,1.9 ; -1.35,1.9 -1.35,2.35 -1.15,2.35 -1.15,1.9 ; -0.85,1.9 -0.85,2.35 -0.65,2.35 -0.65,1.9 ; -0.35,1.9 -0.35,2.35 -0.15,2.35 -0.15,1.9 ; 0.15,1.9 0.15,2.35 0.35,2.35 0.35,1.9 ; 0.65,1.9 0.65,2.35 0.85,2.35 0.85,1.9 ; 1.15,1.9 1.15,2.35 1.35,2.35 1.35,1.9 ; 1.65,1.9 1.65,2.35 1.85,2.35 1.85,1.9 ; 2.15,1.9 2.15,2.35 2.35,2.35 2.35,1.9 ; 2.65,1.9 2.65,2.35 2.85,2.35 2.85,1.9 ; 3.15,1.9 3.15,2.35 3.35,2.35 3.35,1.9 ; 3.65,1.9 3.65,2.35 3.85,2.35 3.85,1.9 ; 4.15,1.9 4.15,2.35 4.35,2.35 4.35,1.9 ; 4.65,1.9 4.65,2.35 4.85,2.35 4.85,1.9 ; 5.15,1.9 5.15,2.35 5.35,2.35 5.35,1.9 ; 5.65,1.9 5.65,2.35 5.85,2.35 5.85,1.9 ; 6.15,1.9 6.15,2.35 6.35,2.35 6.35,1.9 ; 6.65,1.9 6.65,2.35 6.85,2.35 6.85,1.9 ; 7.15,1.9 7.15,2.35 7.35,2.35 7.35,1.9 ; 7.65,1.9 7.65,2.35 7.85,2.35 7.85,1.9 ; 8.15,1.9 8.15,2.35 8.35,2.35 8.35,1.9 ; 8.65,1.9 8.65,2.35 8.85,2.35 8.85,1.9 ; 9.15,1.9 9.15,2.35 9.35,2.35 9.35,1.9 ; 9.65,1.9 9.65,2.35 9.85,2.35 9.85,1.9 ; -12.85,-1.9 12.85,-1.9 12.85,-1 12.15,-1 12.15,1.9 -12.15,1.9 -12.15,-1 -12.85,-1 -12.85,-1.9
Top Courtyard:
  lines w0.05: -13.125,-2.15 -13.125,3 13.125,3 13.125,-2.15 -13.125,-2.15
Top Component Center:
  lines w0.1: -0.5,0 0.5,0 ; 0,-0.5 0,0.5
3D body "687140183622.stp": height 1.28, standoff -0.01, extent -12.85,-1.9 12.85,2.35

## 687140183722 [mm] "ZIF Connectors, Horizontal, Bottom Contact Low Profile, pitch 0.5mm, 40p"
height 1.3
pads (42):
  rect 0.3x1 smd: 1(-9.75,2.3) 2(-9.25,2.3) 3(-8.75,2.3) 4(-8.25,2.3) 5(-7.75,2.3) 6(-7.25,2.3) 7(-6.75,2.3) 8(-6.25,2.3) 9(-5.75,2.3) 10(-5.25,2.3) 11(-4.75,2.3) 12(-4.25,2.3) 13(-3.75,2.3) 14(-3.25,2.3) 15(-2.75,2.3) 16(-2.25,2.3) 17(-1.75,2.3) 18(-1.25,2.3) 19(-0.75,2.3) 20(-0.25,2.3) 21(0.25,2.3) 22(0.75,2.3) 23(1.25,2.3) 24(1.75,2.3) 25(2.25,2.3) 26(2.75,2.3) 27(3.25,2.3) 28(3.75,2.3) 29(4.25,2.3) 30(4.75,2.3) 31(5.25,2.3) 32(5.75,2.3) 33(6.25,2.3) 34(6.75,2.3) 35(7.25,2.3) 36(7.75,2.3) 37(8.25,2.3) 38(8.75,2.3) 39(9.25,2.3) 40(9.75,2.3)
  rect 1.65x1.3 smd: M1(-12.025,0.4) M2(12.025,0.4)
Top Overlay:
  circle w0.25: c-10.45,2.5 r0.125
  lines w0.2: -12.225,-0.55 -12.225,-1 -12.925,-1 -12.925,-1.95 12.925,-1.95 12.925,-1 12.225,-1 12.225,-0.55 ; -12.225,1.35 -12.225,1.95 -10.225,1.95 ; 10.225,1.95 12.225,1.95 12.225,1.35
Top Assembly:
  lines w0.1: -9.85,1.9 -9.85,2.35 -9.65,2.35 -9.65,1.9 ; -9.35,1.9 -9.35,2.35 -9.15,2.35 -9.15,1.9 ; -8.85,1.9 -8.85,2.35 -8.65,2.35 -8.65,1.9 ; -8.35,1.9 -8.35,2.35 -8.15,2.35 -8.15,1.9 ; -7.85,1.9 -7.85,2.35 -7.65,2.35 -7.65,1.9 ; -7.35,1.9 -7.35,2.35 -7.15,2.35 -7.15,1.9 ; -6.85,1.9 -6.85,2.35 -6.65,2.35 -6.65,1.9 ; -6.35,1.9 -6.35,2.35 -6.15,2.35 -6.15,1.9 ; -5.85,1.9 -5.85,2.35 -5.65,2.35 -5.65,1.9 ; -5.35,1.9 -5.35,2.35 -5.15,2.35 -5.15,1.9 ; -4.85,1.9 -4.85,2.35 -4.65,2.35 -4.65,1.9 ; -4.35,1.9 -4.35,2.35 -4.15,2.35 -4.15,1.9 ; -3.85,1.9 -3.85,2.35 -3.65,2.35 -3.65,1.9 ; -3.35,1.9 -3.35,2.35 -3.15,2.35 -3.15,1.9 ; -2.85,1.9 -2.85,2.35 -2.65,2.35 -2.65,1.9 ; -2.35,1.9 -2.35,2.35 -2.15,2.35 -2.15,1.9 ; -1.85,1.9 -1.85,2.35 -1.65,2.35 -1.65,1.9 ; -1.35,1.9 -1.35,2.35 -1.15,2.35 -1.15,1.9 ; -0.85,1.9 -0.85,2.35 -0.65,2.35 -0.65,1.9 ; -0.35,1.9 -0.35,2.35 -0.15,2.35 -0.15,1.9 ; 0.15,1.9 0.15,2.35 0.35,2.35 0.35,1.9 ; 0.65,1.9 0.65,2.35 0.85,2.35 0.85,1.9 ; 1.15,1.9 1.15,2.35 1.35,2.35 1.35,1.9 ; 1.65,1.9 1.65,2.35 1.85,2.35 1.85,1.9 ; 2.15,1.9 2.15,2.35 2.35,2.35 2.35,1.9 ; 2.65,1.9 2.65,2.35 2.85,2.35 2.85,1.9 ; 3.15,1.9 3.15,2.35 3.35,2.35 3.35,1.9 ; 3.65,1.9 3.65,2.35 3.85,2.35 3.85,1.9 ; 4.15,1.9 4.15,2.35 4.35,2.35 4.35,1.9 ; 4.65,1.9 4.65,2.35 4.85,2.35 4.85,1.9 ; 5.15,1.9 5.15,2.35 5.35,2.35 5.35,1.9 ; 5.65,1.9 5.65,2.35 5.85,2.35 5.85,1.9 ; 6.15,1.9 6.15,2.35 6.35,2.35 6.35,1.9 ; 6.65,1.9 6.65,2.35 6.85,2.35 6.85,1.9 ; 7.15,1.9 7.15,2.35 7.35,2.35 7.35,1.9 ; 7.65,1.9 7.65,2.35 7.85,2.35 7.85,1.9 ; 8.15,1.9 8.15,2.35 8.35,2.35 8.35,1.9 ; 8.65,1.9 8.65,2.35 8.85,2.35 8.85,1.9 ; 9.15,1.9 9.15,2.35 9.35,2.35 9.35,1.9 ; 9.65,1.9 9.65,2.35 9.85,2.35 9.85,1.9 ; -12.85,-1.9 12.85,-1.9 12.85,-1 12.15,-1 12.15,1.9 -12.15,1.9 -12.15,-1 -12.85,-1 -12.85,-1.9
Top Designator:
  text ".Designator" at -3.647,-0.357 h1
Top 3D Body:
  lines w0.1: -9.85,1.9 -9.85,2.35 -9.65,2.35 -9.65,1.9 ; -9.35,1.9 -9.35,2.35 -9.15,2.35 -9.15,1.9 ; -8.85,1.9 -8.85,2.35 -8.65,2.35 -8.65,1.9 ; -8.35,1.9 -8.35,2.35 -8.15,2.35 -8.15,1.9 ; -7.85,1.9 -7.85,2.35 -7.65,2.35 -7.65,1.9 ; -7.35,1.9 -7.35,2.35 -7.15,2.35 -7.15,1.9 ; -6.85,1.9 -6.85,2.35 -6.65,2.35 -6.65,1.9 ; -6.35,1.9 -6.35,2.35 -6.15,2.35 -6.15,1.9 ; -5.85,1.9 -5.85,2.35 -5.65,2.35 -5.65,1.9 ; -5.35,1.9 -5.35,2.35 -5.15,2.35 -5.15,1.9 ; -4.85,1.9 -4.85,2.35 -4.65,2.35 -4.65,1.9 ; -4.35,1.9 -4.35,2.35 -4.15,2.35 -4.15,1.9 ; -3.85,1.9 -3.85,2.35 -3.65,2.35 -3.65,1.9 ; -3.35,1.9 -3.35,2.35 -3.15,2.35 -3.15,1.9 ; -2.85,1.9 -2.85,2.35 -2.65,2.35 -2.65,1.9 ; -2.35,1.9 -2.35,2.35 -2.15,2.35 -2.15,1.9 ; -1.85,1.9 -1.85,2.35 -1.65,2.35 -1.65,1.9 ; -1.35,1.9 -1.35,2.35 -1.15,2.35 -1.15,1.9 ; -0.85,1.9 -0.85,2.35 -0.65,2.35 -0.65,1.9 ; -0.35,1.9 -0.35,2.35 -0.15,2.35 -0.15,1.9 ; 0.15,1.9 0.15,2.35 0.35,2.35 0.35,1.9 ; 0.65,1.9 0.65,2.35 0.85,2.35 0.85,1.9 ; 1.15,1.9 1.15,2.35 1.35,2.35 1.35,1.9 ; 1.65,1.9 1.65,2.35 1.85,2.35 1.85,1.9 ; 2.15,1.9 2.15,2.35 2.35,2.35 2.35,1.9 ; 2.65,1.9 2.65,2.35 2.85,2.35 2.85,1.9 ; 3.15,1.9 3.15,2.35 3.35,2.35 3.35,1.9 ; 3.65,1.9 3.65,2.35 3.85,2.35 3.85,1.9 ; 4.15,1.9 4.15,2.35 4.35,2.35 4.35,1.9 ; 4.65,1.9 4.65,2.35 4.85,2.35 4.85,1.9 ; 5.15,1.9 5.15,2.35 5.35,2.35 5.35,1.9 ; 5.65,1.9 5.65,2.35 5.85,2.35 5.85,1.9 ; 6.15,1.9 6.15,2.35 6.35,2.35 6.35,1.9 ; 6.65,1.9 6.65,2.35 6.85,2.35 6.85,1.9 ; 7.15,1.9 7.15,2.35 7.35,2.35 7.35,1.9 ; 7.65,1.9 7.65,2.35 7.85,2.35 7.85,1.9 ; 8.15,1.9 8.15,2.35 8.35,2.35 8.35,1.9 ; 8.65,1.9 8.65,2.35 8.85,2.35 8.85,1.9 ; 9.15,1.9 9.15,2.35 9.35,2.35 9.35,1.9 ; 9.65,1.9 9.65,2.35 9.85,2.35 9.85,1.9 ; -12.85,-1.9 -12.85,-1 -12.15,-1 -12.15,1.9 12.15,1.9 12.15,-1 12.85,-1 12.85,-1.9 -12.85,-1.9
Top Courtyard:
  lines w0.05: -13.125,-2.15 13.125,-2.15 13.125,3 -13.125,3 -13.125,-2.15
Top Component Center:
  lines w0.1: -0.5,0 0.5,0 ; 0,-0.5 0,0.5
3D body "687140183722.stp": height 1.28, standoff -0.01, extent -12.85,-1.9 12.85,2.35

## 687144149022 [mm] "0.50mm SMT ZIF Horizontal Hinge Type Bottom Contact, 44p"
height 2.3
pads (46):
  rect 0.3x1.3 smd: 1(-10.75,3.35) 2(-10.25,3.35) 3(-9.75,3.35) 4(-9.25,3.35) 5(-8.75,3.35) 6(-8.25,3.35) 7(-7.75,3.35) 8(-7.25,3.35) 9(-6.75,3.35) 10(-6.25,3.35) 11(-5.75,3.35) 12(-5.25,3.35) 13(-4.75,3.35) 14(-4.25,3.35) 15(-3.75,3.35) 16(-3.25,3.35) 17(-2.75,3.35) 18(-2.25,3.35) 19(-1.75,3.35) 20(-1.25,3.35) 21(-0.75,3.35) 22(-0.25,3.35) 23(0.25,3.35) 24(0.75,3.35) 25(1.25,3.35) 26(1.75,3.35) 27(2.25,3.35) 28(2.75,3.35) 29(3.25,3.35) 30(3.75,3.35) 31(4.25,3.35) 32(4.75,3.35) 33(5.25,3.35) 34(5.75,3.35) 35(6.25,3.35) 36(6.75,3.35) 37(7.25,3.35) 38(7.75,3.35) 39(8.25,3.35) 40(8.75,3.35) 41(9.25,3.35) 42(9.75,3.35) 43(10.25,3.35) 44(10.75,3.35)
  rect 2x1.8 smd: M1(-12.55,0.6) M2(12.55,0.6)
Top Overlay:
  circle w0.25: c-11.55,3.55 r0.125
  lines w0.2: -13.125,-0.625 -13.125,-2.975 13.125,-2.975 13.125,-0.625 ; -13.125,1.825 -13.125,2.975 -11.225,2.975 ; 11.225,2.975 13.125,2.975 13.125,1.825
Top Assembly:
  lines w0.1: -10.85,2.9 -10.85,3.6 -10.65,3.6 -10.65,2.9 ; -10.35,2.9 -10.35,3.6 -10.15,3.6 -10.15,2.9 ; -9.85,2.9 -9.85,3.6 -9.65,3.6 -9.65,2.9 ; -9.35,2.9 -9.35,3.6 -9.15,3.6 -9.15,2.9 ; -8.85,2.9 -8.85,3.6 -8.65,3.6 -8.65,2.9 ; -8.35,2.9 -8.35,3.6 -8.15,3.6 -8.15,2.9 ; -7.85,2.9 -7.85,3.6 -7.65,3.6 -7.65,2.9 ; -7.35,2.9 -7.35,3.6 -7.15,3.6 -7.15,2.9 ; -6.85,2.9 -6.85,3.6 -6.65,3.6 -6.65,2.9 ; -6.35,2.9 -6.35,3.6 -6.15,3.6 -6.15,2.9 ; -5.85,2.9 -5.85,3.6 -5.65,3.6 -5.65,2.9 ; -5.35,2.9 -5.35,3.6 -5.15,3.6 -5.15,2.9 ; -4.85,2.9 -4.85,3.6 -4.65,3.6 -4.65,2.9 ; -4.35,2.9 -4.35,3.6 -4.15,3.6 -4.15,2.9 ; -3.85,2.9 -3.85,3.6 -3.65,3.6 -3.65,2.9 ; -3.35,2.9 -3.35,3.6 -3.15,3.6 -3.15,2.9 ; -2.85,2.9 -2.85,3.6 -2.65,3.6 -2.65,2.9 ; -2.35,2.9 -2.35,3.6 -2.15,3.6 -2.15,2.9 ; -1.85,2.9 -1.85,3.6 -1.65,3.6 -1.65,2.9 ; -1.35,2.9 -1.35,3.6 -1.15,3.6 -1.15,2.9 ; -0.85,2.9 -0.85,3.6 -0.65,3.6 -0.65,2.9 ; -0.35,2.9 -0.35,3.6 -0.15,3.6 -0.15,2.9 ; 0.15,2.9 0.15,3.6 0.35,3.6 0.35,2.9 ; 0.65,2.9 0.65,3.6 0.85,3.6 0.85,2.9 ; 1.15,2.9 1.15,3.6 1.35,3.6 1.35,2.9 ; 1.65,2.9 1.65,3.6 1.85,3.6 1.85,2.9 ; 2.15,2.9 2.15,3.6 2.35,3.6 2.35,2.9 ; 2.65,2.9 2.65,3.6 2.85,3.6 2.85,2.9 ; 3.15,2.9 3.15,3.6 3.35,3.6 3.35,2.9 ; 3.65,2.9 3.65,3.6 3.85,3.6 3.85,2.9 ; 4.15,2.9 4.15,3.6 4.35,3.6 4.35,2.9 ; 4.65,2.9 4.65,3.6 4.85,3.6 4.85,2.9 ; 5.15,2.9 5.15,3.6 5.35,3.6 5.35,2.9 ; 5.65,2.9 5.65,3.6 5.85,3.6 5.85,2.9 ; 6.15,2.9 6.15,3.6 6.35,3.6 6.35,2.9 ; 6.65,2.9 6.65,3.6 6.85,3.6 6.85,2.9 ; 7.15,2.9 7.15,3.6 7.35,3.6 7.35,2.9 ; 7.65,2.9 7.65,3.6 7.85,3.6 7.85,2.9 ; 8.15,2.9 8.15,3.6 8.35,3.6 8.35,2.9 ; 8.65,2.9 8.65,3.6 8.85,3.6 8.85,2.9 ; 9.15,2.9 9.15,3.6 9.35,3.6 9.35,2.9 ; 9.65,2.9 9.65,3.6 9.85,3.6 9.85,2.9 ; 10.15,2.9 10.15,3.6 10.35,3.6 10.35,2.9 ; 10.65,2.9 10.65,3.6 10.85,3.6 10.85,2.9 ; -13.05,-2.9 -13.05,2.9 13.05,2.9 13.05,-2.9 -13.05,-2.9
Top Designator:
  text ".Designator" at -3.647,-0.357 h1
Top 3D Body:
  lines w0.1: -10.85,2.9 -10.85,3.6 -10.65,3.6 -10.65,2.9 ; -10.35,2.9 -10.35,3.6 -10.15,3.6 -10.15,2.9 ; -9.85,2.9 -9.85,3.6 -9.65,3.6 -9.65,2.9 ; -9.35,2.9 -9.35,3.6 -9.15,3.6 -9.15,2.9 ; -8.85,2.9 -8.85,3.6 -8.65,3.6 -8.65,2.9 ; -8.35,2.9 -8.35,3.6 -8.15,3.6 -8.15,2.9 ; -7.85,2.9 -7.85,3.6 -7.65,3.6 -7.65,2.9 ; -7.35,2.9 -7.35,3.6 -7.15,3.6 -7.15,2.9 ; -6.85,2.9 -6.85,3.6 -6.65,3.6 -6.65,2.9 ; -6.35,2.9 -6.35,3.6 -6.15,3.6 -6.15,2.9 ; -5.85,2.9 -5.85,3.6 -5.65,3.6 -5.65,2.9 ; -5.35,2.9 -5.35,3.6 -5.15,3.6 -5.15,2.9 ; -4.85,2.9 -4.85,3.6 -4.65,3.6 -4.65,2.9 ; -4.35,2.9 -4.35,3.6 -4.15,3.6 -4.15,2.9 ; -3.85,2.9 -3.85,3.6 -3.65,3.6 -3.65,2.9 ; -3.35,2.9 -3.35,3.6 -3.15,3.6 -3.15,2.9 ; -2.85,2.9 -2.85,3.6 -2.65,3.6 -2.65,2.9 ; -2.35,2.9 -2.35,3.6 -2.15,3.6 -2.15,2.9 ; -1.85,2.9 -1.85,3.6 -1.65,3.6 -1.65,2.9 ; -1.35,2.9 -1.35,3.6 -1.15,3.6 -1.15,2.9 ; -0.85,2.9 -0.85,3.6 -0.65,3.6 -0.65,2.9 ; -0.35,2.9 -0.35,3.6 -0.15,3.6 -0.15,2.9 ; 0.15,2.9 0.15,3.6 0.35,3.6 0.35,2.9 ; 0.65,2.9 0.65,3.6 0.85,3.6 0.85,2.9 ; 1.15,2.9 1.15,3.6 1.35,3.6 1.35,2.9 ; 1.65,2.9 1.65,3.6 1.85,3.6 1.85,2.9 ; 2.15,2.9 2.15,3.6 2.35,3.6 2.35,2.9 ; 2.65,2.9 2.65,3.6 2.85,3.6 2.85,2.9 ; 3.15,2.9 3.15,3.6 3.35,3.6 3.35,2.9 ; 3.65,2.9 3.65,3.6 3.85,3.6 3.85,2.9 ; 4.15,2.9 4.15,3.6 4.35,3.6 4.35,2.9 ; 4.65,2.9 4.65,3.6 4.85,3.6 4.85,2.9 ; 5.15,2.9 5.15,3.6 5.35,3.6 5.35,2.9 ; 5.65,2.9 5.65,3.6 5.85,3.6 5.85,2.9 ; 6.15,2.9 6.15,3.6 6.35,3.6 6.35,2.9 ; 6.65,2.9 6.65,3.6 6.85,3.6 6.85,2.9 ; 7.15,2.9 7.15,3.6 7.35,3.6 7.35,2.9 ; 7.65,2.9 7.65,3.6 7.85,3.6 7.85,2.9 ; 8.15,2.9 8.15,3.6 8.35,3.6 8.35,2.9 ; 8.65,2.9 8.65,3.6 8.85,3.6 8.85,2.9 ; 9.15,2.9 9.15,3.6 9.35,3.6 9.35,2.9 ; 9.65,2.9 9.65,3.6 9.85,3.6 9.85,2.9 ; 10.15,2.9 10.15,3.6 10.35,3.6 10.35,2.9 ; 10.65,2.9 10.65,3.6 10.85,3.6 10.85,2.9 ; -13.05,-2.9 13.05,-2.9 13.05,2.9 -13.05,2.9 -13.05,-2.9
Top Courtyard:
  lines w0.05: -13.75,-3.175 -13.75,4.2 13.75,4.2 13.75,-3.175 -13.75,-3.175
Top Component Center:
  lines w0.1: -0.5,0 0.5,0 ; 0,-0.5 0,0.5
3D body "687144149022.stp": height 2.25, standoff 0, extent -13.05,-2.9 13.05,3.6

## 687145149022 [mm] "0.50mm SMT ZIF Horizontal Hinge Type Bottom Contact, 45p"
height 2.3
pads (47):
  rect 0.3x1.3 smd: 1(-11,3.35) 2(-10.5,3.35) 3(-10,3.35) 4(-9.5,3.35) 5(-9,3.35) 6(-8.5,3.35) 7(-8,3.35) 8(-7.5,3.35) 9(-7,3.35) 10(-6.5,3.35) 11(-6,3.35) 12(-5.5,3.35) 13(-5,3.35) 14(-4.5,3.35) 15(-4,3.35) 16(-3.5,3.35) 17(-3,3.35) 18(-2.5,3.35) 19(-2,3.35) 20(-1.5,3.35) 21(-1,3.35) 22(-0.5,3.35) 23(0,3.35) 24(0.5,3.35) 25(1,3.35) 26(1.5,3.35) 27(2,3.35) 28(2.5,3.35) 29(3,3.35) 30(3.5,3.35) 31(4,3.35) 32(4.5,3.35) 33(5,3.35) 34(5.5,3.35) 35(6,3.35) 36(6.5,3.35) 37(7,3.35) 38(7.5,3.35) 39(8,3.35) 40(8.5,3.35) 41(9,3.35) 42(9.5,3.35) 43(10,3.35) 44(10.5,3.35) 45(11,3.35)
  rect 2x1.8 smd: M1(-12.8,0.6) M2(12.8,0.6)
Top Overlay:
  circle w0.25: c-11.8,3.55 r0.125
  lines w0.2: -13.375,-0.625 -13.375,-2.975 13.375,-2.975 ; -13.375,1.825 -13.375,2.975 -11.475,2.975 ; 11.475,2.975 13.375,2.975 13.375,1.825 ; 13.375,-2.975 13.375,-0.625
Top Assembly:
  lines w0.1: -11.1,2.9 -11.1,3.6 -10.9,3.6 -10.9,2.9 ; -10.6,2.9 -10.6,3.6 -10.4,3.6 -10.4,2.9 ; -10.1,2.9 -10.1,3.6 -9.9,3.6 -9.9,2.9 ; -9.6,2.9 -9.6,3.6 -9.4,3.6 -9.4,2.9 ; -9.1,2.9 -9.1,3.6 -8.9,3.6 -8.9,2.9 ; -8.6,2.9 -8.6,3.6 -8.4,3.6 -8.4,2.9 ; -8.1,2.9 -8.1,3.6 -7.9,3.6 -7.9,2.9 ; -7.6,2.9 -7.6,3.6 -7.4,3.6 -7.4,2.9 ; -7.1,2.9 -7.1,3.6 -6.9,3.6 -6.9,2.9 ; -6.6,2.9 -6.6,3.6 -6.4,3.6 -6.4,2.9 ; -6.1,2.9 -6.1,3.6 -5.9,3.6 -5.9,2.9 ; -5.6,2.9 -5.6,3.6 -5.4,3.6 -5.4,2.9 ; -5.1,2.9 -5.1,3.6 -4.9,3.6 -4.9,2.9 ; -4.6,2.9 -4.6,3.6 -4.4,3.6 -4.4,2.9 ; -4.1,2.9 -4.1,3.6 -3.9,3.6 -3.9,2.9 ; -3.6,2.9 -3.6,3.6 -3.4,3.6 -3.4,2.9 ; -3.1,2.9 -3.1,3.6 -2.9,3.6 -2.9,2.9 ; -2.6,2.9 -2.6,3.6 -2.4,3.6 -2.4,2.9 ; -2.1,2.9 -2.1,3.6 -1.9,3.6 -1.9,2.9 ; -1.6,2.9 -1.6,3.6 -1.4,3.6 -1.4,2.9 ; -1.1,2.9 -1.1,3.6 -0.9,3.6 -0.9,2.9 ; -0.6,2.9 -0.6,3.6 -0.4,3.6 -0.4,2.9 ; -0.1,2.9 -0.1,3.6 0.1,3.6 0.1,2.9 ; 0.4,2.9 0.4,3.6 0.6,3.6 0.6,2.9 ; 0.9,2.9 0.9,3.6 1.1,3.6 1.1,2.9 ; 1.4,2.9 1.4,3.6 1.6,3.6 1.6,2.9 ; 1.9,2.9 1.9,3.6 2.1,3.6 2.1,2.9 ; 2.4,2.9 2.4,3.6 2.6,3.6 2.6,2.9 ; 2.9,2.9 2.9,3.6 3.1,3.6 3.1,2.9 ; 3.4,2.9 3.4,3.6 3.6,3.6 3.6,2.9 ; 3.9,2.9 3.9,3.6 4.1,3.6 4.1,2.9 ; 4.4,2.9 4.4,3.6 4.6,3.6 4.6,2.9 ; 4.9,2.9 4.9,3.6 5.1,3.6 5.1,2.9 ; 5.4,2.9 5.4,3.6 5.6,3.6 5.6,2.9 ; 5.9,2.9 5.9,3.6 6.1,3.6 6.1,2.9 ; 6.4,2.9 6.4,3.6 6.6,3.6 6.6,2.9 ; 6.9,2.9 6.9,3.6 7.1,3.6 7.1,2.9 ; 7.4,2.9 7.4,3.6 7.6,3.6 7.6,2.9 ; 7.9,2.9 7.9,3.6 8.1,3.6 8.1,2.9 ; 8.4,2.9 8.4,3.6 8.6,3.6 8.6,2.9 ; 8.9,2.9 8.9,3.6 9.1,3.6 9.1,2.9 ; 9.4,2.9 9.4,3.6 9.6,3.6 9.6,2.9 ; 9.9,2.9 9.9,3.6 10.1,3.6 10.1,2.9 ; 10.4,2.9 10.4,3.6 10.6,3.6 10.6,2.9 ; 10.9,2.9 10.9,3.6 11.1,3.6 11.1,2.9 ; -13.3,-2.9 -13.3,2.9 13.3,2.9 13.3,-2.9 -13.3,-2.9
Top Designator:
  text ".Designator" at -3.647,-0.357 h1
Top 3D Body:
  lines w0.1: -11.1,2.9 -11.1,3.6 -10.9,3.6 -10.9,2.9 ; -10.6,2.9 -10.6,3.6 -10.4,3.6 -10.4,2.9 ; -10.1,2.9 -10.1,3.6 -9.9,3.6 -9.9,2.9 ; -9.6,2.9 -9.6,3.6 -9.4,3.6 -9.4,2.9 ; -9.1,2.9 -9.1,3.6 -8.9,3.6 -8.9,2.9 ; -8.6,2.9 -8.6,3.6 -8.4,3.6 -8.4,2.9 ; -8.1,2.9 -8.1,3.6 -7.9,3.6 -7.9,2.9 ; -7.6,2.9 -7.6,3.6 -7.4,3.6 -7.4,2.9 ; -7.1,2.9 -7.1,3.6 -6.9,3.6 -6.9,2.9 ; -6.6,2.9 -6.6,3.6 -6.4,3.6 -6.4,2.9 ; -6.1,2.9 -6.1,3.6 -5.9,3.6 -5.9,2.9 ; -5.6,2.9 -5.6,3.6 -5.4,3.6 -5.4,2.9 ; -5.1,2.9 -5.1,3.6 -4.9,3.6 -4.9,2.9 ; -4.6,2.9 -4.6,3.6 -4.4,3.6 -4.4,2.9 ; -4.1,2.9 -4.1,3.6 -3.9,3.6 -3.9,2.9 ; -3.6,2.9 -3.6,3.6 -3.4,3.6 -3.4,2.9 ; -3.1,2.9 -3.1,3.6 -2.9,3.6 -2.9,2.9 ; -2.6,2.9 -2.6,3.6 -2.4,3.6 -2.4,2.9 ; -2.1,2.9 -2.1,3.6 -1.9,3.6 -1.9,2.9 ; -1.6,2.9 -1.6,3.6 -1.4,3.6 -1.4,2.9 ; -1.1,2.9 -1.1,3.6 -0.9,3.6 -0.9,2.9 ; -0.6,2.9 -0.6,3.6 -0.4,3.6 -0.4,2.9 ; -0.1,2.9 -0.1,3.6 0.1,3.6 0.1,2.9 ; 0.4,2.9 0.4,3.6 0.6,3.6 0.6,2.9 ; 0.9,2.9 0.9,3.6 1.1,3.6 1.1,2.9 ; 1.4,2.9 1.4,3.6 1.6,3.6 1.6,2.9 ; 1.9,2.9 1.9,3.6 2.1,3.6 2.1,2.9 ; 2.4,2.9 2.4,3.6 2.6,3.6 2.6,2.9 ; 2.9,2.9 2.9,3.6 3.1,3.6 3.1,2.9 ; 3.4,2.9 3.4,3.6 3.6,3.6 3.6,2.9 ; 3.9,2.9 3.9,3.6 4.1,3.6 4.1,2.9 ; 4.4,2.9 4.4,3.6 4.6,3.6 4.6,2.9 ; 4.9,2.9 4.9,3.6 5.1,3.6 5.1,2.9 ; 5.4,2.9 5.4,3.6 5.6,3.6 5.6,2.9 ; 5.9,2.9 5.9,3.6 6.1,3.6 6.1,2.9 ; 6.4,2.9 6.4,3.6 6.6,3.6 6.6,2.9 ; 6.9,2.9 6.9,3.6 7.1,3.6 7.1,2.9 ; 7.4,2.9 7.4,3.6 7.6,3.6 7.6,2.9 ; 7.9,2.9 7.9,3.6 8.1,3.6 8.1,2.9 ; 8.4,2.9 8.4,3.6 8.6,3.6 8.6,2.9 ; 8.9,2.9 8.9,3.6 9.1,3.6 9.1,2.9 ; 9.4,2.9 9.4,3.6 9.6,3.6 9.6,2.9 ; 9.9,2.9 9.9,3.6 10.1,3.6 10.1,2.9 ; 10.4,2.9 10.4,3.6 10.6,3.6 10.6,2.9 ; 10.9,2.9 10.9,3.6 11.1,3.6 11.1,2.9 ; -13.3,-2.9 13.3,-2.9 13.3,2.9 -13.3,2.9 -13.3,-2.9
Top Courtyard:
  lines w0.05: -14,-3.175 -14,4.2 14,4.2 14,-3.175 -14,-3.175
Top Component Center:
  lines w0.1: -0.5,0 0.5,0 ; 0,-0.5 0,0.5
3D body "687145149022.stp": height 2.25, standoff 0, extent -13.3,-2.9 13.3,3.6

## 687145182122 [mm] "ZIF Connectors, Horizontal, Dual Contact Back Locking, pitch 0.5mm, 45p"
height 1.06
pads (47):
  rect 0.3x0.8 smd: 1(-11,1.1) 2(-10.5,1.1) 3(-10,1.1) 4(-9.5,1.1) 5(-9,1.1) 6(-8.5,1.1) 7(-8,1.1) 8(-7.5,1.1) 9(-7,1.1) 10(-6.5,1.1) 11(-6,1.1) 12(-5.5,1.1) 13(-5,1.1) 14(-4.5,1.1) 15(-4,1.1) 16(-3.5,1.1) 17(-3,1.1) 18(-2.5,1.1) 19(-2,1.1) 20(-1.5,1.1) 21(-1,1.1) 22(-0.5,1.1) 23(0,1.1) 24(0.5,1.1) 25(1,1.1) 26(1.5,1.1) 27(2,1.1) 28(2.5,1.1) 29(3,1.1) 30(3.5,1.1) 31(4,1.1) 32(4.5,1.1) 33(5,1.1) 34(5.5,1.1) 35(6,1.1) 36(6.5,1.1) 37(7,1.1) 38(7.5,1.1) 39(8,1.1) 40(8.5,1.1) 41(9,1.1) 42(9.5,1.1) 43(10,1.1) 44(10.5,1.1) 45(11,1.1)
  rect 0.4x0.8 smd: M1(-12,-1.4) M2(12,-1.4)
Top Overlay:
  circle w0.15: c-11.05,2.3 r0.075
  lines w0.2: -12.325,-0.7 -12.325,1.05 -11.55,1.05 -11.55,1.425 -12,1.425 -12,1.925 12,1.925 12,1.425 11.55,1.425 11.55,1.05 12.325,1.05 12.325,-0.7 ; -11.5,-1.925 11.5,-1.925
Top Assembly:
  lines w0.1: -12.25,-1.15 -12.05,-1.15 -12.05,-1.85 12.05,-1.85 12.05,-1.15 12.25,-1.15 12.25,1.05 11.55,1.05 11.55,1.35 12,1.35 12,1.85 -12,1.85 -12,1.35 -11.55,1.35 -11.55,1.05 -12.25,1.05 -12.25,-1.15
Top Designator:
  text ".Designator" at -3.647,-0.357 h1
Top 3D Body:
  lines w0.1: -12.25,-1.15 -12.25,1.05 -11.55,1.05 -11.55,1.35 -12,1.35 -12,1.85 12,1.85 12,1.35 11.55,1.35 11.55,1.05 12.25,1.05 12.25,-1.15 12.05,-1.15 12.05,-1.85 -12.05,-1.85 -12.05,-1.15 -12.25,-1.15
Top Courtyard:
  lines w0.05: -12.525,-2.125 12.525,-2.125 12.525,2.125 -12.525,2.125 -12.525,-2.125
Top Component Center:
  lines w0.1: -0.5,0 0.5,0 ; 0,-0.5 0,0.5
3D body "687145182122.stp": height 0.98, standoff -0.01, extent -12.25,-1.85 12.25,1.85

## 687150149022 [mm] "0.50mm SMT ZIF Horizontal Hinge Type Bottom Contact, 50p"
height 2.3
pads (52):
  rect 0.3x1.3 smd: 1(-12.25,3.35) 2(-11.75,3.35) 3(-11.25,3.35) 4(-10.75,3.35) 5(-10.25,3.35) 6(-9.75,3.35) 7(-9.25,3.35) 8(-8.75,3.35) 9(-8.25,3.35) 10(-7.75,3.35) 11(-7.25,3.35) 12(-6.75,3.35) 13(-6.25,3.35) 14(-5.75,3.35) 15(-5.25,3.35) 16(-4.75,3.35) 17(-4.25,3.35) 18(-3.75,3.35) 19(-3.25,3.35) 20(-2.75,3.35) 21(-2.25,3.35) 22(-1.75,3.35) 23(-1.25,3.35) 24(-0.75,3.35) 25(-0.25,3.35) 26(0.25,3.35) 27(0.75,3.35) 28(1.25,3.35) 29(1.75,3.35) 30(2.25,3.35) 31(2.75,3.35) 32(3.25,3.35) 33(3.75,3.35) 34(4.25,3.35) 35(4.75,3.35) 36(5.25,3.35) 37(5.75,3.35) 38(6.25,3.35) 39(6.75,3.35) 40(7.25,3.35) 41(7.75,3.35) 42(8.25,3.35) 43(8.75,3.35) 44(9.25,3.35) 45(9.75,3.35) 46(10.25,3.35) 47(10.75,3.35) 48(11.25,3.35) 49(11.75,3.35) 50(12.25,3.35)
  rect 2x1.8 smd: M1(-14.05,0.6) M2(14.05,0.6)
Top Overlay:
  circle w0.25: c-13.05,3.55 r0.125
  lines w0.2: -14.625,-0.625 -14.625,-2.975 14.625,-2.975 14.625,-0.625 ; -14.625,1.825 -14.625,2.975 -12.725,2.975 ; 12.725,2.975 14.625,2.975 14.625,1.825
Top Assembly:
  drawing of 154 lines, arcs and shapes, not listed
Top Designator:
  text ".Designator" at -3.647,-0.357 h1
Top 3D Body:
  drawing of 154 lines, arcs and shapes, not listed
Top Courtyard:
  lines w0.05: -15.25,-3.175 15.25,-3.175 15.25,4.2 -15.25,4.2 -15.25,-3.175
Top Component Center:
  lines w0.1: -0.5,0 0.5,0 ; 0,-0.5 0,0.5
3D body "687150149022.stp": height 2.25, standoff 0, extent -14.55,-2.9 14.55,3.6

## 687150182122 [mm] "ZIF Connectors, Horizontal, Dual Contact Back Locking, pitch 0.5mm, 50p"
height 1.06
pads (52):
  rect 0.3x0.8 smd: 1(-12.25,1.1) 2(-11.75,1.1) 3(-11.25,1.1) 4(-10.75,1.1) 5(-10.25,1.1) 6(-9.75,1.1) 7(-9.25,1.1) 8(-8.75,1.1) 9(-8.25,1.1) 10(-7.75,1.1) 11(-7.25,1.1) 12(-6.75,1.1) 13(-6.25,1.1) 14(-5.75,1.1) 15(-5.25,1.1) 16(-4.75,1.1) 17(-4.25,1.1) 18(-3.75,1.1) 19(-3.25,1.1) 20(-2.75,1.1) 21(-2.25,1.1) 22(-1.75,1.1) 23(-1.25,1.1) 24(-0.75,1.1) 25(-0.25,1.1) 26(0.25,1.1) 27(0.75,1.1) 28(1.25,1.1) 29(1.75,1.1) 30(2.25,1.1) 31(2.75,1.1) 32(3.25,1.1) 33(3.75,1.1) 34(4.25,1.1) 35(4.75,1.1) 36(5.25,1.1) 37(5.75,1.1) 38(6.25,1.1) 39(6.75,1.1) 40(7.25,1.1) 41(7.75,1.1) 42(8.25,1.1) 43(8.75,1.1) 44(9.25,1.1) 45(9.75,1.1) 46(10.25,1.1) 47(10.75,1.1) 48(11.25,1.1) 49(11.75,1.1) 50(12.25,1.1)
  rect 0.4x0.8 smd: M1(-13.25,-1.4) M2(13.25,-1.4)
Top Overlay:
  circle w0.15: c-12.3,2.3 r0.075
  lines w0.2: -13.575,-0.7 -13.575,1.05 -12.8,1.05 -12.8,1.425 -13.25,1.425 -13.25,1.925 13.25,1.925 13.25,1.425 12.8,1.425 12.8,1.05 13.575,1.05 13.575,-0.7 ; -12.75,-1.925 12.75,-1.925
Top Assembly:
  lines w0.1: -13.5,-1.15 -13.5,1.05 -12.8,1.05 -12.8,1.35 -13.25,1.35 -13.25,1.85 13.25,1.85 13.25,1.35 12.8,1.35 12.8,1.05 13.5,1.05 13.5,-1.15 13.3,-1.15 13.3,-1.85 -13.3,-1.85 -13.3,-1.15 -13.5,-1.15
Top Designator:
  text ".Designator" at -3.647,-0.357 h1
Top 3D Body:
  lines w0.1: -13.5,-1.15 -13.3,-1.15 -13.3,-1.85 13.3,-1.85 13.3,-1.15 13.5,-1.15 13.5,1.05 12.8,1.05 12.8,1.35 13.25,1.35 13.25,1.85 -13.25,1.85 -13.25,1.35 -12.8,1.35 -12.8,1.05 -13.5,1.05 -13.5,-1.15
Top Courtyard:
  lines w0.05: -13.775,-2.125 -13.775,2.125 13.775,2.125 13.775,-2.125 -13.775,-2.125
Top Component Center:
  lines w0.1: -0.5,0 0.5,0 ; 0,-0.5 0,0.5
3D body "687150182122.stp": height 0.98, standoff -0.01, extent -13.5,-1.85 13.5,1.85

## 687306124422 [mm] "ZIF Connectors, Vertical, Type A, pitch 0.5mm, 6p"
height 4.5
pads (10):
  rect 0.4x1.5 smd: 1(-1.25,-1.4) 2(-0.75,1.4) 3(-0.25,-1.4) 4(0.25,1.4) 5(0.75,-1.4) 6(1.25,1.4)
  rect 0.8x1.5 smd: M1(-2.25,-1.4) M2(-2.25,1.4) M3(2.25,-1.4) M4(2.25,1.4)
Top Overlay:
  circle w0.25: c-1.25,-2.625 r0.125
  lines w0.2: -2.95,-1.075 -4.775,-1.075 -4.775,1.075 -2.95,1.075 ; 2.95,-1.075 4.775,-1.075 4.775,1.075 2.95,1.075
Top Assembly:
  lines w0.1: -2.35,-1 -2.35,-1.75 -2.15,-1.75 -2.15,-1 ; -2.35,1 -2.35,1.75 -2.15,1.75 -2.15,1 ; -1.35,-1 -1.35,-1.7 -1.15,-1.7 -1.15,-1 ; -0.85,1 -0.85,1.7 -0.65,1.7 -0.65,1 ; -0.35,-1 -0.35,-1.7 -0.15,-1.7 -0.15,-1 ; 0.15,1 0.15,1.7 0.35,1.7 0.35,1 ; 0.65,-1 0.65,-1.7 0.85,-1.7 0.85,-1 ; 1.15,1 1.15,1.7 1.35,1.7 1.35,1 ; 2.15,-1 2.15,-1.75 2.35,-1.75 2.35,-1 ; 2.15,1 2.15,1.75 2.35,1.75 2.35,1 ; -4.7,-1 4.7,-1 4.7,1 -4.7,1 -4.7,-1
Top Designator:
  text ".Designator" at -3.647,-0.357 h1
Top 3D Body:
  lines w0.1: -2.35,-1 -2.35,-1.75 -2.15,-1.75 -2.15,-1 ; -2.35,1 -2.35,1.75 -2.15,1.75 -2.15,1 ; -1.35,-1 -1.35,-1.7 -1.15,-1.7 -1.15,-1 ; -0.85,1 -0.85,1.7 -0.65,1.7 -0.65,1 ; -0.35,-1 -0.35,-1.7 -0.15,-1.7 -0.15,-1 ; 0.15,1 0.15,1.7 0.35,1.7 0.35,1 ; 0.65,-1 0.65,-1.7 0.85,-1.7 0.85,-1 ; 1.15,1 1.15,1.7 1.35,1.7 1.35,1 ; 2.15,-1 2.15,-1.75 2.35,-1.75 2.35,-1 ; 2.15,1 2.15,1.75 2.35,1.75 2.35,1 ; -4.7,-1 -4.7,1 4.7,1 4.7,-1 -4.7,-1
Top Courtyard:
  lines w0.05: -4.975,-2.35 4.975,-2.35 4.975,2.35 -4.975,2.35 -4.975,-2.35
Top Component Center:
  lines w0.1: -0.5,0 0.5,0 ; 0,-0.5 0,0.5
3D body "687306124422.stp": height 4.92, standoff 0.02, extent -4.7,-1.75 4.7,1.75

## 687308124422 [mm] "ZIF Connectors, Vertical, Type A, pitch 0.5mm, 8p"
height 4.5
pads (12):
  rect 0.4x1.5 smd: 1(-1.75,-1.4) 2(-1.25,1.4) 3(-0.75,-1.4) 4(-0.25,1.4) 5(0.25,-1.4) 6(0.75,1.4) 7(1.25,-1.4) 8(1.75,1.4)
  rect 0.8x1.5 smd: M1(-2.75,-1.4) M2(-2.75,1.4) M3(2.75,-1.4) M4(2.75,1.4)
Top Overlay:
  circle w0.25: c-1.75,-2.625 r0.125
  lines w0.2: -3.45,-1.075 -5.275,-1.075 -5.275,1.075 -3.45,1.075 ; 3.45,-1.075 5.275,-1.075 5.275,1.075 3.45,1.075
Top Assembly:
  lines w0.1: -2.85,-1 -2.85,-1.75 -2.65,-1.75 -2.65,-1 ; -2.85,1 -2.85,1.75 -2.65,1.75 -2.65,1 ; -1.85,-1 -1.85,-1.7 -1.65,-1.7 -1.65,-1 ; -1.35,1 -1.35,1.7 -1.15,1.7 -1.15,1 ; -0.85,-1 -0.85,-1.7 -0.65,-1.7 -0.65,-1 ; -0.35,1 -0.35,1.7 -0.15,1.7 -0.15,1 ; 0.15,-1 0.15,-1.7 0.35,-1.7 0.35,-1 ; 0.65,1 0.65,1.7 0.85,1.7 0.85,1 ; 1.15,-1 1.15,-1.7 1.35,-1.7 1.35,-1 ; 1.65,1 1.65,1.7 1.85,1.7 1.85,1 ; 2.65,-1 2.65,-1.75 2.85,-1.75 2.85,-1 ; 2.65,1 2.65,1.75 2.85,1.75 2.85,1 ; -5.2,-1 5.2,-1 5.2,1 -5.2,1 -5.2,-1
Top Designator:
  text ".Designator" at -3.647,-0.357 h1
Top 3D Body:
  lines w0.1: -2.85,-1 -2.85,-1.75 -2.65,-1.75 -2.65,-1 ; -2.85,1 -2.85,1.75 -2.65,1.75 -2.65,1 ; -1.85,-1 -1.85,-1.7 -1.65,-1.7 -1.65,-1 ; -1.35,1 -1.35,1.7 -1.15,1.7 -1.15,1 ; -0.85,-1 -0.85,-1.7 -0.65,-1.7 -0.65,-1 ; -0.35,1 -0.35,1.7 -0.15,1.7 -0.15,1 ; 0.15,-1 0.15,-1.7 0.35,-1.7 0.35,-1 ; 0.65,1 0.65,1.7 0.85,1.7 0.85,1 ; 1.15,-1 1.15,-1.7 1.35,-1.7 1.35,-1 ; 1.65,1 1.65,1.7 1.85,1.7 1.85,1 ; 2.65,-1 2.65,-1.75 2.85,-1.75 2.85,-1 ; 2.65,1 2.65,1.75 2.85,1.75 2.85,1 ; -5.2,-1 -5.2,1 5.2,1 5.2,-1 -5.2,-1
Top Courtyard:
  lines w0.05: -5.475,-2.35 5.475,-2.35 5.475,2.35 -5.475,2.35 -5.475,-2.35
Top Component Center:
  lines w0.1: -0.5,0 0.5,0 ; 0,-0.5 0,0.5
3D body "687308124422.stp": height 4.92, standoff 0.02, extent -5.2,-1.75 5.2,1.75